# Altium integrated library GPDSE.IntLib: 426 symbols (part 3 of 5)
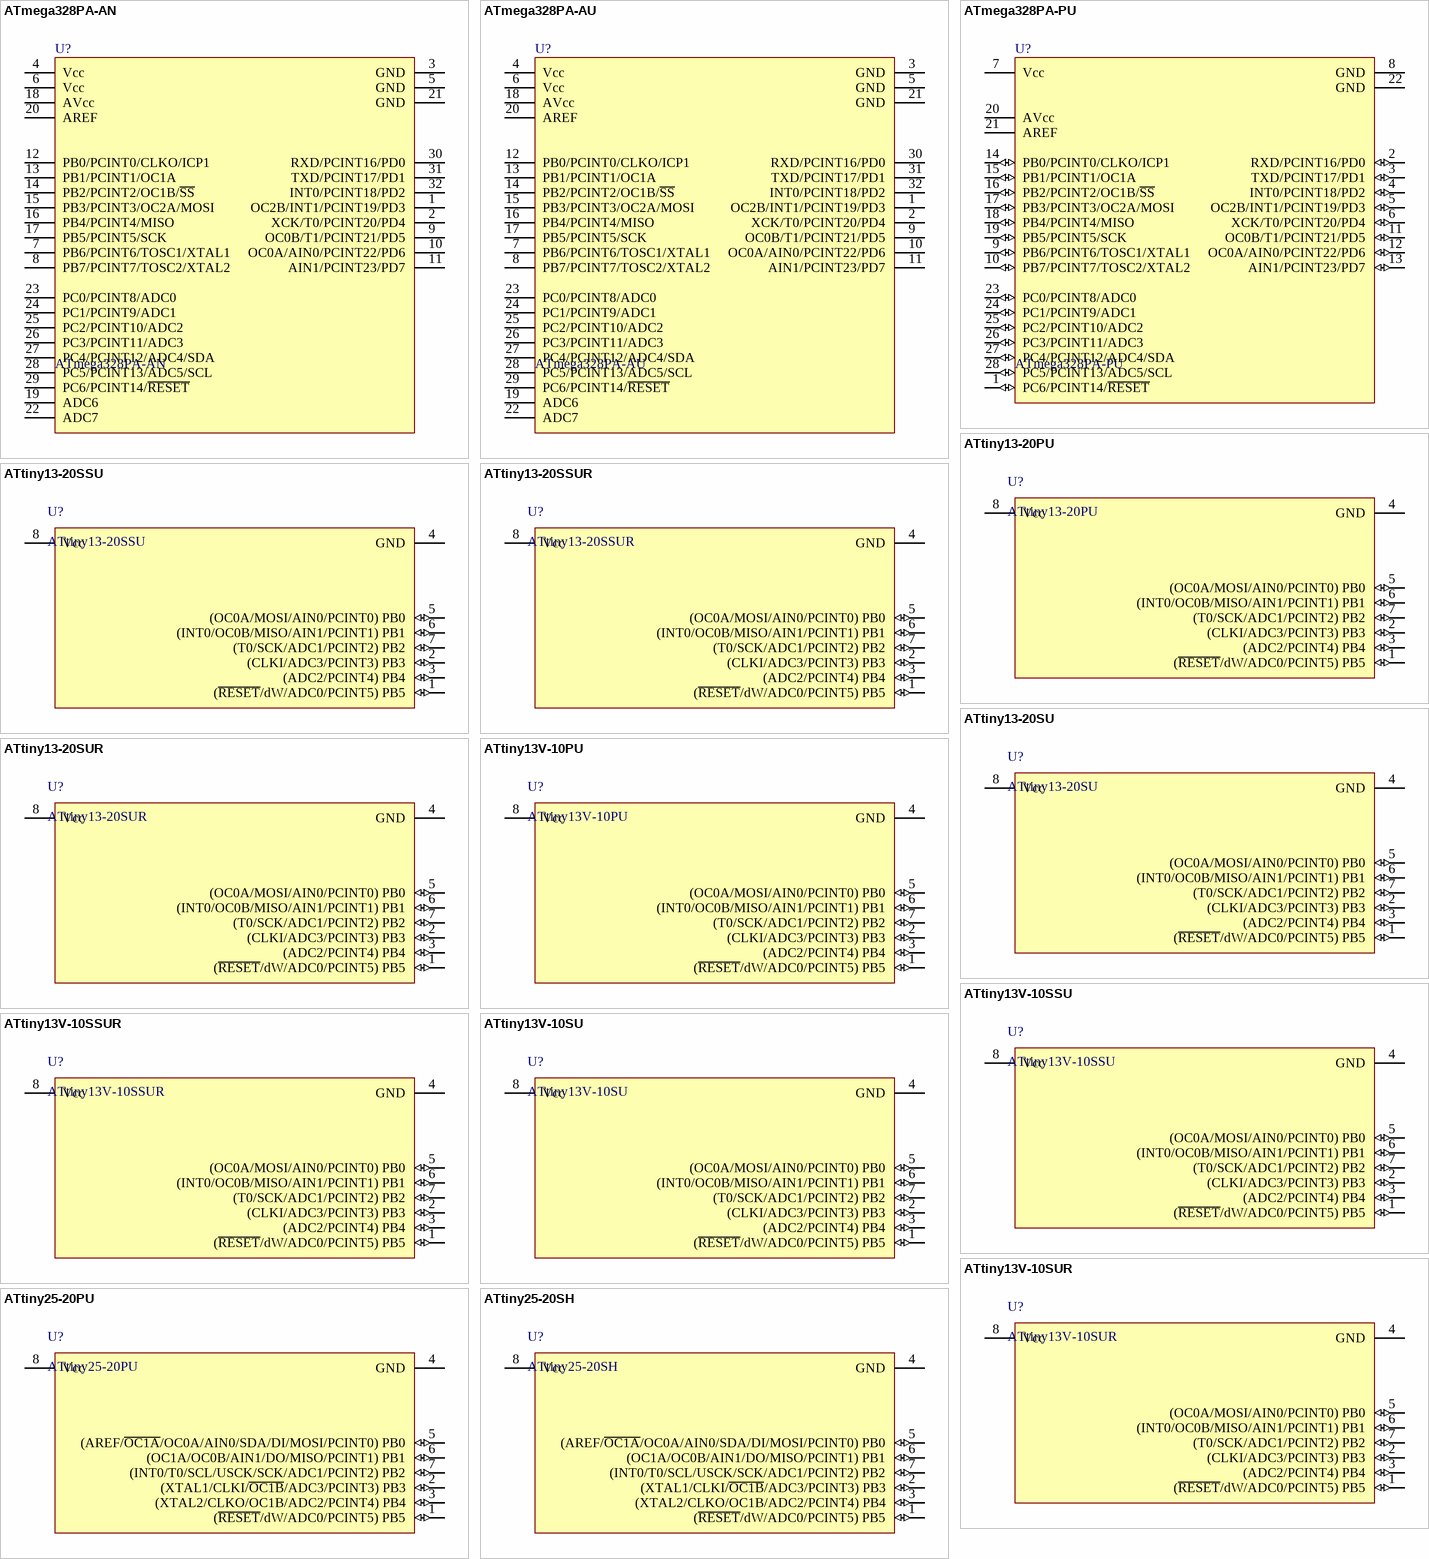
[diagram p28: symbols ATmega328PA-AN to ATtiny25-20SH]

## ATtiny13-20SSU
designator U?
Atmel 8-bit AVR Microcontroller with 1 KB In-System Programmable Flash; ADC Channel: 4; Analog Comparator: 1; Clock Frequency: 0 - 20 MHz; Debug: debugWire; EEPROM Memory: 64 B; Flash Memory: 1 KB; I/O Pins: 6; PWM Channel: 2; Serial USI: 0; Supply Voltage (Vdd): 2.7 - 5.5 V; SRAM Memory: 64 B; Timer 8 bits: 1
footprint SOIC08-150(50) (SOIC 8 Leads; Row Spacing 3.81 mm; Pitch 1.27 mm; 3D André L´Hérault)
pins: 1 (~{RESET}/dW/ADC0/PCINT5) PB5 (io), 2 (CLKI/ADC3/PCINT3) PB3 (io), 3 (ADC2/PCINT4) PB4 (io), 4 GND (power), 5 (OC0A/MOSI/AIN0/PCINT0) PB0 (io), 6 (INT0/OC0B/MISO/AIN1/PCINT1) PB1 (io), 7 (T0/SCK/ADC1/PCINT2) PB2 (io), 8 Vcc (power)

## ATtiny13-20SSUR
designator U?
Atmel 8-bit AVR Microcontroller with 1 KB In-System Programmable Flash; ADC Channel: 4; Analog Comparator: 1; Clock Frequency: 0 - 20 MHz; Debug: debugWire; EEPROM Memory: 64 B; Flash Memory: 1 KB; I/O Pins: 6; PWM Channel: 2; Serial USI: 0; Supply Voltage (Vdd): 2.7 - 5.5 V; SRAM Memory: 64 B; Timer 8 bits: 1
footprint SOIC08-150(50) (SOIC 8 Leads; Row Spacing 3.81 mm; Pitch 1.27 mm; 3D André L´Hérault)
pins: 1 (~{RESET}/dW/ADC0/PCINT5) PB5 (io), 2 (CLKI/ADC3/PCINT3) PB3 (io), 3 (ADC2/PCINT4) PB4 (io), 4 GND (power), 5 (OC0A/MOSI/AIN0/PCINT0) PB0 (io), 6 (INT0/OC0B/MISO/AIN1/PCINT1) PB1 (io), 7 (T0/SCK/ADC1/PCINT2) PB2 (io), 8 Vcc (power)

## ATtiny13-20SU
designator U?
Atmel 8-bit AVR Microcontroller with 1 KB In-System Programmable Flash; ADC Channel: 4; Analog Comparator: 1; Clock Frequency: 0 - 20 MHz; Debug: debugWire; EEPROM Memory: 64 B; Flash Memory: 1 KB; I/O Pins: 6; PWM Channel: 2; Serial USI: 0; Supply Voltage (Vdd): 2.7 - 5.5 V; SRAM Memory: 64 B; Timer 8 bits: 1
footprint SOP08-5.3mm(1.27mm) (Small Outline Package 8 pin)
pins: 1 (~{RESET}/dW/ADC0/PCINT5) PB5 (io), 2 (CLKI/ADC3/PCINT3) PB3 (io), 3 (ADC2/PCINT4) PB4 (io), 4 GND (power), 5 (OC0A/MOSI/AIN0/PCINT0) PB0 (io), 6 (INT0/OC0B/MISO/AIN1/PCINT1) PB1 (io), 7 (T0/SCK/ADC1/PCINT2) PB2 (io), 8 Vcc (power)

## ATtiny13-20SUR
designator U?
Atmel 8-bit AVR Microcontroller with 1 KB In-System Programmable Flash; ADC Channel: 4; Analog Comparator: 1; Clock Frequency: 0 - 20 MHz; Debug: debugWire; EEPROM Memory: 64 B; Flash Memory: 1 KB; I/O Pins: 6; PWM Channel: 2; Serial USI: 0; Supply Voltage (Vdd): 2.7 - 5.5 V; SRAM Memory: 64 B; Timer 8 bits: 1
footprint SOP08-5.3mm(1.27mm) (Small Outline Package 8 pin)
pins: 1 (~{RESET}/dW/ADC0/PCINT5) PB5 (io), 2 (CLKI/ADC3/PCINT3) PB3 (io), 3 (ADC2/PCINT4) PB4 (io), 4 GND (power), 5 (OC0A/MOSI/AIN0/PCINT0) PB0 (io), 6 (INT0/OC0B/MISO/AIN1/PCINT1) PB1 (io), 7 (T0/SCK/ADC1/PCINT2) PB2 (io), 8 Vcc (power)

## ATtiny13V-10PU
designator U?
Atmel 8-bit AVR Microcontroller with 1 KB In-System Programmable Flash; ADC Channel: 4; Analog Comparator: 1; Clock Frequency: 0 - 10 MHz; Debug: debugWire; EEPROM Memory: 64 B; Flash Memory: 1 KB; I/O Pins: 6; PWM Channel: 2; Serial USI: 0; Supply Voltage (Vdd): 1.8 - 5.5 V; SRAM Memory: 64 B; Timer 8 bits: 1
footprint DIP08-300(100) (DIP; 8 Leads; Row Spacing 7.62 mm; Pitch 2.54 mm; 3D CircuitWorks)
pins: 1 (~{RESET}/dW/ADC0/PCINT5) PB5 (io), 2 (CLKI/ADC3/PCINT3) PB3 (io), 3 (ADC2/PCINT4) PB4 (io), 4 GND (power), 5 (OC0A/MOSI/AIN0/PCINT0) PB0 (io), 6 (INT0/OC0B/MISO/AIN1/PCINT1) PB1 (io), 7 (T0/SCK/ADC1/PCINT2) PB2 (io), 8 Vcc (power)

## ATtiny13V-10SSU
designator U?
Atmel 8-bit AVR Microcontroller with 1 KB In-System Programmable Flash; ADC Channel: 4; Analog Comparator: 1; Clock Frequency: 0 - 10 MHz; Debug: debugWire; EEPROM Memory: 64 B; Flash Memory: 1 KB; I/O Pins: 6; PWM Channel: 2; Serial USI: 0; Supply Voltage (Vdd): 1.8 - 5.5 V; SRAM Memory: 64 B; Timer 8 bits: 1
footprint SOIC08-150(50) (SOIC 8 Leads; Row Spacing 3.81 mm; Pitch 1.27 mm; 3D André L´Hérault)
pins: 1 (~{RESET}/dW/ADC0/PCINT5) PB5 (io), 2 (CLKI/ADC3/PCINT3) PB3 (io), 3 (ADC2/PCINT4) PB4 (io), 4 GND (power), 5 (OC0A/MOSI/AIN0/PCINT0) PB0 (io), 6 (INT0/OC0B/MISO/AIN1/PCINT1) PB1 (io), 7 (T0/SCK/ADC1/PCINT2) PB2 (io), 8 Vcc (power)

## ATtiny13V-10SSUR
designator U?
Atmel 8-bit AVR Microcontroller with 1 KB In-System Programmable Flash; ADC Channel: 4; Analog Comparator: 1; Clock Frequency: 0 - 10 MHz; Debug: debugWire; EEPROM Memory: 64 B; Flash Memory: 1 KB; I/O Pins: 6; PWM Channel: 2; Serial USI: 0; Supply Voltage (Vdd): 1.8 - 5.5 V; SRAM Memory: 64 B; Timer 8 bits: 1
footprint SOIC08-150(50) (SOIC 8 Leads; Row Spacing 3.81 mm; Pitch 1.27 mm; 3D André L´Hérault)
pins: 1 (~{RESET}/dW/ADC0/PCINT5) PB5 (io), 2 (CLKI/ADC3/PCINT3) PB3 (io), 3 (ADC2/PCINT4) PB4 (io), 4 GND (power), 5 (OC0A/MOSI/AIN0/PCINT0) PB0 (io), 6 (INT0/OC0B/MISO/AIN1/PCINT1) PB1 (io), 7 (T0/SCK/ADC1/PCINT2) PB2 (io), 8 Vcc (power)

## ATtiny13V-10SU
designator U?
Atmel 8-bit AVR Microcontroller with 1 KB In-System Programmable Flash; ADC Channel: 4; Analog Comparator: 1; Clock Frequency: 0 - 10 MHz; Debug: debugWire; EEPROM Memory: 64 B; Flash Memory: 1 KB; I/O Pins: 6; PWM Channel: 2; Serial USI: 0; Supply Voltage (Vdd): 1.8 - 5.5 V; SRAM Memory: 64 B; Timer 8 bits: 1
footprint SOP08-5.3mm(1.27mm) (Small Outline Package 8 pin)
pins: 1 (~{RESET}/dW/ADC0/PCINT5) PB5 (io), 2 (CLKI/ADC3/PCINT3) PB3 (io), 3 (ADC2/PCINT4) PB4 (io), 4 GND (power), 5 (OC0A/MOSI/AIN0/PCINT0) PB0 (io), 6 (INT0/OC0B/MISO/AIN1/PCINT1) PB1 (io), 7 (T0/SCK/ADC1/PCINT2) PB2 (io), 8 Vcc (power)

## ATtiny13V-10SUR
designator U?
Atmel 8-bit AVR Microcontroller with 1 KB In-System Programmable Flash; ADC Channel: 4; Analog Comparator: 1; Clock Frequency: 0 - 10 MHz; Debug: debugWire; EEPROM Memory: 64 B; Flash Memory: 1 KB; I/O Pins: 6; PWM Channel: 2; Serial USI: 0; Supply Voltage (Vdd): 1.8 - 5.5 V; SRAM Memory: 64 B; Timer 8 bits: 1
footprint SOP08-5.3mm(1.27mm) (Small Outline Package 8 pin)
pins: 1 (~{RESET}/dW/ADC0/PCINT5) PB5 (io), 2 (CLKI/ADC3/PCINT3) PB3 (io), 3 (ADC2/PCINT4) PB4 (io), 4 GND (power), 5 (OC0A/MOSI/AIN0/PCINT0) PB0 (io), 6 (INT0/OC0B/MISO/AIN1/PCINT1) PB1 (io), 7 (T0/SCK/ADC1/PCINT2) PB2 (io), 8 Vcc (power)

## ATtiny25-20PU
designator U?
Atmel 8-bit AVR Microcontroller with 2 KB In-System Programmable Flash; ADC Channel: 4; Clock Frequency: 0 - 20 MHz; Debug: debugWire; EEPROM Memory: 128 B; Flash Memory: 2 KB; I/O Pins: 6; PWM Channel: 2; Serial USI: 1; Supply Voltage (Vdd): 2.7 - 5.5 V; Analog Comparator: *; SRAM Memory: 128 B; Timer 8 bits: 1
footprint DIP08-300(100) (DIP; 8 Leads; Row Spacing 7.62 mm; Pitch 2.54 mm; 3D CircuitWorks)
pins: 1 (~{RESET}/dW/ADC0/PCINT5) PB5 (io), 2 (XTAL1/CLKI/~{OC1B}/ADC3/PCINT3) PB3 (io), 3 (XTAL2/CLKO/OC1B/ADC2/PCINT4) PB4 (io), 4 GND (power), 5 (AREF/~{OC1A}/OC0A/AIN0/SDA/DI/MOSI/PCINT0) PB0 (io), 6 (OC1A/OC0B/AIN1/DO/MISO/PCINT1) PB1 (io), 7 (INT0/T0/SCL/USCK/SCK/ADC1/PCINT2) PB2 (io), 8 Vcc (power)

## ATtiny25-20SH
designator U?
Atmel 8-bit AVR Microcontroller with 2 KB In-System Programmable Flash; ADC Channel: 4; Clock Frequency: 0 - 20 MHz; Debug: debugWire; EEPROM Memory: 128 B; Flash Memory: 2 KB; I/O Pins: 6; PWM Channel: 2; Serial USI: 1; Supply Voltage (Vdd): 2.7 - 5.5 V; Analog Comparator: *; SRAM Memory: 128 B; Timer 8 bits: 1
footprint SOP08-5.3mm(1.27mm) (Small Outline Package 8 pin)
pins: 1 (~{RESET}/dW/ADC0/PCINT5) PB5 (io), 2 (XTAL1/CLKI/~{OC1B}/ADC3/PCINT3) PB3 (io), 3 (XTAL2/CLKO/OC1B/ADC2/PCINT4) PB4 (io), 4 GND (power), 5 (AREF/~{OC1A}/OC0A/AIN0/SDA/DI/MOSI/PCINT0) PB0 (io), 6 (OC1A/OC0B/AIN1/DO/MISO/PCINT1) PB1 (io), 7 (INT0/T0/SCL/USCK/SCK/ADC1/PCINT2) PB2 (io), 8 Vcc (power)

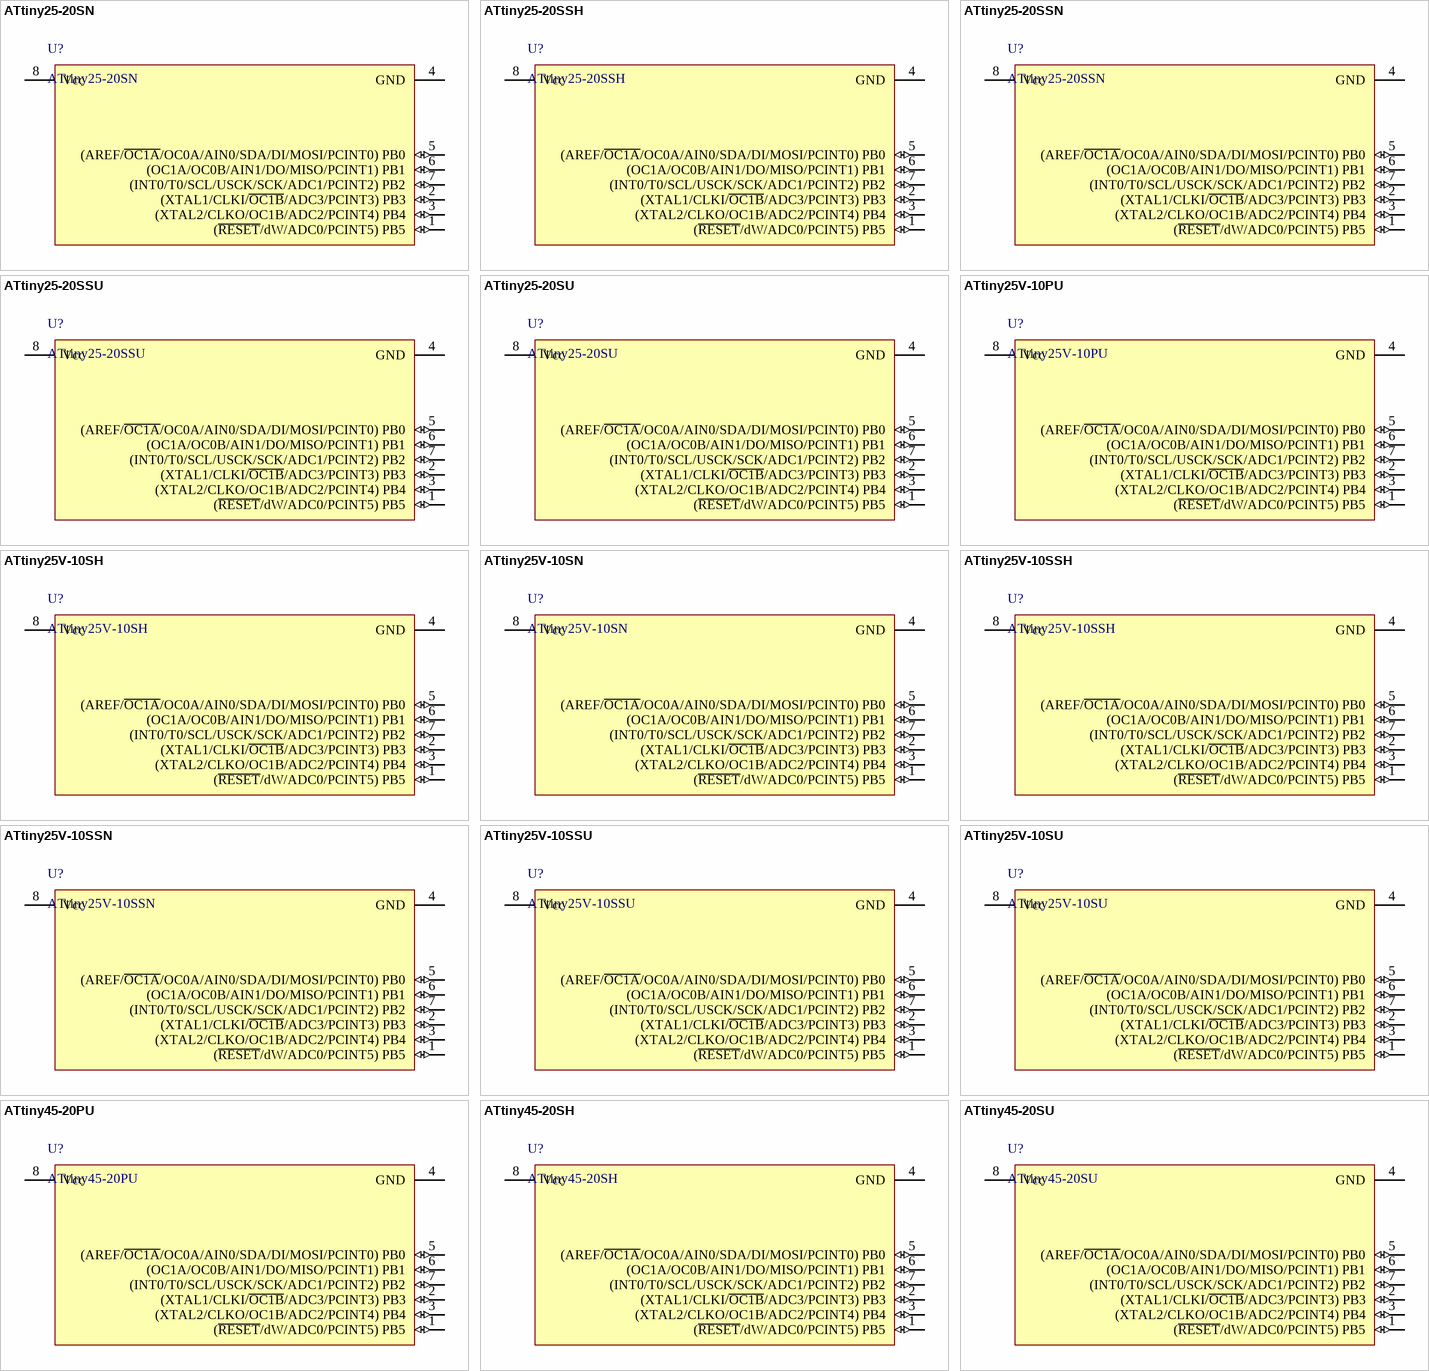
[diagram p11: symbols ATtiny25-20SN to ATtiny45-20SU]

## ATtiny25-20SN
designator U?
Atmel 8-bit AVR Microcontroller with 2 KB In-System Programmable Flash; ADC Channel: 4; Clock Frequency: 0 - 20 MHz; Debug: debugWire; EEPROM Memory: 128 B; Flash Memory: 2 KB; I/O Pins: 6; PWM Channel: 2; Serial USI: 1; Supply Voltage (Vdd): 2.7 - 5.5 V; Analog Comparator: *; SRAM Memory: 128 B; Timer 8 bits: 1
footprint SOP08-5.3mm(1.27mm) (Small Outline Package 8 pin)
pins: 1 (~{RESET}/dW/ADC0/PCINT5) PB5 (io), 2 (XTAL1/CLKI/~{OC1B}/ADC3/PCINT3) PB3 (io), 3 (XTAL2/CLKO/OC1B/ADC2/PCINT4) PB4 (io), 4 GND (power), 5 (AREF/~{OC1A}/OC0A/AIN0/SDA/DI/MOSI/PCINT0) PB0 (io), 6 (OC1A/OC0B/AIN1/DO/MISO/PCINT1) PB1 (io), 7 (INT0/T0/SCL/USCK/SCK/ADC1/PCINT2) PB2 (io), 8 Vcc (power)

## ATtiny25-20SSH
designator U?
Atmel 8-bit AVR Microcontroller with 2 KB In-System Programmable Flash; ADC Channel: 4; Clock Frequency: 0 - 20 MHz; Debug: debugWire; EEPROM Memory: 128 B; Flash Memory: 2 KB; I/O Pins: 6; PWM Channel: 2; Serial USI: 1; Supply Voltage (Vdd): 2.7 - 5.5 V; Analog Comparator: *; SRAM Memory: 128 B; Timer 8 bits: 1
footprint SOIC08-150(50) (SOIC 8 Leads; Row Spacing 3.81 mm; Pitch 1.27 mm; 3D André L´Hérault)
pins: 1 (~{RESET}/dW/ADC0/PCINT5) PB5 (io), 2 (XTAL1/CLKI/~{OC1B}/ADC3/PCINT3) PB3 (io), 3 (XTAL2/CLKO/OC1B/ADC2/PCINT4) PB4 (io), 4 GND (power), 5 (AREF/~{OC1A}/OC0A/AIN0/SDA/DI/MOSI/PCINT0) PB0 (io), 6 (OC1A/OC0B/AIN1/DO/MISO/PCINT1) PB1 (io), 7 (INT0/T0/SCL/USCK/SCK/ADC1/PCINT2) PB2 (io), 8 Vcc (power)

## ATtiny25-20SSN
designator U?
Atmel 8-bit AVR Microcontroller with 2 KB In-System Programmable Flash; ADC Channel: 4; Clock Frequency: 0 - 20 MHz; Debug: debugWire; EEPROM Memory: 128 B; Flash Memory: 2 KB; I/O Pins: 6; PWM Channel: 2; Serial USI: 1; Supply Voltage (Vdd): 2.7 - 5.5 V; Analog Comparator: *; SRAM Memory: 128 B; Timer 8 bits: 1
footprint SOIC08-150(50) (SOIC 8 Leads; Row Spacing 3.81 mm; Pitch 1.27 mm; 3D André L´Hérault)
pins: 1 (~{RESET}/dW/ADC0/PCINT5) PB5 (io), 2 (XTAL1/CLKI/~{OC1B}/ADC3/PCINT3) PB3 (io), 3 (XTAL2/CLKO/OC1B/ADC2/PCINT4) PB4 (io), 4 GND (power), 5 (AREF/~{OC1A}/OC0A/AIN0/SDA/DI/MOSI/PCINT0) PB0 (io), 6 (OC1A/OC0B/AIN1/DO/MISO/PCINT1) PB1 (io), 7 (INT0/T0/SCL/USCK/SCK/ADC1/PCINT2) PB2 (io), 8 Vcc (power)

## ATtiny25-20SSU
designator U?
Atmel 8-bit AVR Microcontroller with 2 KB In-System Programmable Flash; ADC Channel: 4; Clock Frequency: 0 - 20 MHz; Debug: debugWire; EEPROM Memory: 128 B; Flash Memory: 2 KB; I/O Pins: 6; PWM Channel: 2; Serial USI: 1; Supply Voltage (Vdd): 2.7 - 5.5 V; Analog Comparator: *; SRAM Memory: 128 B; Timer 8 bits: 1
footprint SOIC08-150(50) (SOIC 8 Leads; Row Spacing 3.81 mm; Pitch 1.27 mm; 3D André L´Hérault)
pins: 1 (~{RESET}/dW/ADC0/PCINT5) PB5 (io), 2 (XTAL1/CLKI/~{OC1B}/ADC3/PCINT3) PB3 (io), 3 (XTAL2/CLKO/OC1B/ADC2/PCINT4) PB4 (io), 4 GND (power), 5 (AREF/~{OC1A}/OC0A/AIN0/SDA/DI/MOSI/PCINT0) PB0 (io), 6 (OC1A/OC0B/AIN1/DO/MISO/PCINT1) PB1 (io), 7 (INT0/T0/SCL/USCK/SCK/ADC1/PCINT2) PB2 (io), 8 Vcc (power)

## ATtiny25-20SU
designator U?
Atmel 8-bit AVR Microcontroller with 2 KB In-System Programmable Flash; ADC Channel: 4; Clock Frequency: 0 - 20 MHz; Debug: debugWire; EEPROM Memory: 128 B; Flash Memory: 2 KB; I/O Pins: 6; PWM Channel: 2; Serial USI: 1; Supply Voltage (Vdd): 2.7 - 5.5 V; Analog Comparator: *; SRAM Memory: 128 B; Timer 8 bits: 1
footprint SOP08-5.3mm(1.27mm) (Small Outline Package 8 pin)
pins: 1 (~{RESET}/dW/ADC0/PCINT5) PB5 (io), 2 (XTAL1/CLKI/~{OC1B}/ADC3/PCINT3) PB3 (io), 3 (XTAL2/CLKO/OC1B/ADC2/PCINT4) PB4 (io), 4 GND (power), 5 (AREF/~{OC1A}/OC0A/AIN0/SDA/DI/MOSI/PCINT0) PB0 (io), 6 (OC1A/OC0B/AIN1/DO/MISO/PCINT1) PB1 (io), 7 (INT0/T0/SCL/USCK/SCK/ADC1/PCINT2) PB2 (io), 8 Vcc (power)

## ATtiny25V-10PU
designator U?
Atmel 8-bit AVR Microcontroller with 2 KB In-System Programmable Flash; ADC Channel: 4; Clock Frequency: 0 - 10 MHz; Debug: debugWire; EEPROM Memory: 128 B; Flash Memory: 2 KB; I/O Pins: 6; PWM Channel: 2; Serial USI: 1; Supply Voltage (Vdd): 1.8 - 5.5 V; Analog Comparator: *; SRAM Memory: 128 B; Timer 8 bits: 1
footprint DIP08-300(100) (DIP; 8 Leads; Row Spacing 7.62 mm; Pitch 2.54 mm; 3D CircuitWorks)
pins: 1 (~{RESET}/dW/ADC0/PCINT5) PB5 (io), 2 (XTAL1/CLKI/~{OC1B}/ADC3/PCINT3) PB3 (io), 3 (XTAL2/CLKO/OC1B/ADC2/PCINT4) PB4 (io), 4 GND (power), 5 (AREF/~{OC1A}/OC0A/AIN0/SDA/DI/MOSI/PCINT0) PB0 (io), 6 (OC1A/OC0B/AIN1/DO/MISO/PCINT1) PB1 (io), 7 (INT0/T0/SCL/USCK/SCK/ADC1/PCINT2) PB2 (io), 8 Vcc (power)

## ATtiny25V-10SH
designator U?
Atmel 8-bit AVR Microcontroller with 2 KB In-System Programmable Flash; ADC Channel: 4; Clock Frequency: 0 - 10 MHz; Debug: debugWire; EEPROM Memory: 128 B; Flash Memory: 2 KB; I/O Pins: 6; PWM Channel: 2; Serial USI: 1; Supply Voltage (Vdd): 1.8 - 5.5 V; Analog Comparator: *; SRAM Memory: 128 B; Timer 8 bits: 1
footprint SOP08-5.3mm(1.27mm) (Small Outline Package 8 pin)
pins: 1 (~{RESET}/dW/ADC0/PCINT5) PB5 (io), 2 (XTAL1/CLKI/~{OC1B}/ADC3/PCINT3) PB3 (io), 3 (XTAL2/CLKO/OC1B/ADC2/PCINT4) PB4 (io), 4 GND (power), 5 (AREF/~{OC1A}/OC0A/AIN0/SDA/DI/MOSI/PCINT0) PB0 (io), 6 (OC1A/OC0B/AIN1/DO/MISO/PCINT1) PB1 (io), 7 (INT0/T0/SCL/USCK/SCK/ADC1/PCINT2) PB2 (io), 8 Vcc (power)

## ATtiny25V-10SN
designator U?
Atmel 8-bit AVR Microcontroller with 2 KB In-System Programmable Flash; ADC Channel: 4; Clock Frequency: 0 - 10 MHz; Debug: debugWire; EEPROM Memory: 128 B; Flash Memory: 2 KB; I/O Pins: 6; PWM Channel: 2; Serial USI: 1; Supply Voltage (Vdd): 1.8 - 5.5 V; Analog Comparator: *; SRAM Memory: 128 B; Timer 8 bits: 1
footprint SOP08-5.3mm(1.27mm) (Small Outline Package 8 pin)
pins: 1 (~{RESET}/dW/ADC0/PCINT5) PB5 (io), 2 (XTAL1/CLKI/~{OC1B}/ADC3/PCINT3) PB3 (io), 3 (XTAL2/CLKO/OC1B/ADC2/PCINT4) PB4 (io), 4 GND (power), 5 (AREF/~{OC1A}/OC0A/AIN0/SDA/DI/MOSI/PCINT0) PB0 (io), 6 (OC1A/OC0B/AIN1/DO/MISO/PCINT1) PB1 (io), 7 (INT0/T0/SCL/USCK/SCK/ADC1/PCINT2) PB2 (io), 8 Vcc (power)

## ATtiny25V-10SSH
designator U?
Atmel 8-bit AVR Microcontroller with 2 KB In-System Programmable Flash; ADC Channel: 4; Clock Frequency: 0 - 10 MHz; Debug: debugWire; EEPROM Memory: 128 B; Flash Memory: 2 KB; I/O Pins: 6; PWM Channel: 2; Serial USI: 1; Supply Voltage (Vdd): 1.8 - 5.5 V; Analog Comparator: *; SRAM Memory: 128 B; Timer 8 bits: 1
footprint SOIC08-150(50) (SOIC 8 Leads; Row Spacing 3.81 mm; Pitch 1.27 mm; 3D André L´Hérault)
pins: 1 (~{RESET}/dW/ADC0/PCINT5) PB5 (io), 2 (XTAL1/CLKI/~{OC1B}/ADC3/PCINT3) PB3 (io), 3 (XTAL2/CLKO/OC1B/ADC2/PCINT4) PB4 (io), 4 GND (power), 5 (AREF/~{OC1A}/OC0A/AIN0/SDA/DI/MOSI/PCINT0) PB0 (io), 6 (OC1A/OC0B/AIN1/DO/MISO/PCINT1) PB1 (io), 7 (INT0/T0/SCL/USCK/SCK/ADC1/PCINT2) PB2 (io), 8 Vcc (power)

## ATtiny25V-10SSN
designator U?
Atmel 8-bit AVR Microcontroller with 2 KB In-System Programmable Flash; ADC Channel: 4; Clock Frequency: 0 - 10 MHz; Debug: debugWire; EEPROM Memory: 128 B; Flash Memory: 2 KB; I/O Pins: 6; PWM Channel: 2; Serial USI: 1; Supply Voltage (Vdd): 1.8 - 5.5 V; Analog Comparator: *; SRAM Memory: 128 B; Timer 8 bits: 1
footprint SOIC08-150(50) (SOIC 8 Leads; Row Spacing 3.81 mm; Pitch 1.27 mm; 3D André L´Hérault)
pins: 1 (~{RESET}/dW/ADC0/PCINT5) PB5 (io), 2 (XTAL1/CLKI/~{OC1B}/ADC3/PCINT3) PB3 (io), 3 (XTAL2/CLKO/OC1B/ADC2/PCINT4) PB4 (io), 4 GND (power), 5 (AREF/~{OC1A}/OC0A/AIN0/SDA/DI/MOSI/PCINT0) PB0 (io), 6 (OC1A/OC0B/AIN1/DO/MISO/PCINT1) PB1 (io), 7 (INT0/T0/SCL/USCK/SCK/ADC1/PCINT2) PB2 (io), 8 Vcc (power)

## ATtiny25V-10SSU
designator U?
Atmel 8-bit AVR Microcontroller with 2 KB In-System Programmable Flash; ADC Channel: 4; Clock Frequency: 0 - 10 MHz; Debug: debugWire; EEPROM Memory: 128 B; Flash Memory: 2 KB; I/O Pins: 6; PWM Channel: 2; Serial USI: 1; Supply Voltage (Vdd): 1.8 - 5.5 V; Analog Comparator: *; SRAM Memory: 128 B; Timer 8 bits: 1
footprint SOIC08-150(50) (SOIC 8 Leads; Row Spacing 3.81 mm; Pitch 1.27 mm; 3D André L´Hérault)
pins: 1 (~{RESET}/dW/ADC0/PCINT5) PB5 (io), 2 (XTAL1/CLKI/~{OC1B}/ADC3/PCINT3) PB3 (io), 3 (XTAL2/CLKO/OC1B/ADC2/PCINT4) PB4 (io), 4 GND (power), 5 (AREF/~{OC1A}/OC0A/AIN0/SDA/DI/MOSI/PCINT0) PB0 (io), 6 (OC1A/OC0B/AIN1/DO/MISO/PCINT1) PB1 (io), 7 (INT0/T0/SCL/USCK/SCK/ADC1/PCINT2) PB2 (io), 8 Vcc (power)

## ATtiny25V-10SU
designator U?
Atmel 8-bit AVR Microcontroller with 2 KB In-System Programmable Flash; ADC Channel: 4; Clock Frequency: 0 - 10 MHz; Debug: debugWire; EEPROM Memory: 128 B; Flash Memory: 2 KB; I/O Pins: 6; PWM Channel: 2; Serial USI: 1; Supply Voltage (Vdd): 1.8 - 5.5 V; Analog Comparator: *; SRAM Memory: 128 B; Timer 8 bits: 1
footprint SOP08-5.3mm(1.27mm) (Small Outline Package 8 pin)
pins: 1 (~{RESET}/dW/ADC0/PCINT5) PB5 (io), 2 (XTAL1/CLKI/~{OC1B}/ADC3/PCINT3) PB3 (io), 3 (XTAL2/CLKO/OC1B/ADC2/PCINT4) PB4 (io), 4 GND (power), 5 (AREF/~{OC1A}/OC0A/AIN0/SDA/DI/MOSI/PCINT0) PB0 (io), 6 (OC1A/OC0B/AIN1/DO/MISO/PCINT1) PB1 (io), 7 (INT0/T0/SCL/USCK/SCK/ADC1/PCINT2) PB2 (io), 8 Vcc (power)

## ATtiny45-20PU
designator U?
Atmel 8-bit AVR Microcontroller with 4 KB In-System Programmable Flash; ADC Channel: 4; Clock Frequency: 0 - 20 MHz; Debug: debugWire; EEPROM Memory: 256 B; Flash Memory: 4 KB; I/O Pins: 6; PWM Channel: 2; Serial USI: 1; Supply Voltage (Vdd): 2.7 - 5.5 V; Analog Comparator: *; SRAM Memory: 256 B; Timer 8 bits: 1
footprint DIP08-300(100) (DIP; 8 Leads; Row Spacing 7.62 mm; Pitch 2.54 mm; 3D CircuitWorks)
pins: 1 (~{RESET}/dW/ADC0/PCINT5) PB5 (io), 2 (XTAL1/CLKI/~{OC1B}/ADC3/PCINT3) PB3 (io), 3 (XTAL2/CLKO/OC1B/ADC2/PCINT4) PB4 (io), 4 GND (power), 5 (AREF/~{OC1A}/OC0A/AIN0/SDA/DI/MOSI/PCINT0) PB0 (io), 6 (OC1A/OC0B/AIN1/DO/MISO/PCINT1) PB1 (io), 7 (INT0/T0/SCL/USCK/SCK/ADC1/PCINT2) PB2 (io), 8 Vcc (power)

## ATtiny45-20SH
designator U?
Atmel 8-bit AVR Microcontroller with 4 KB In-System Programmable Flash; ADC Channel: 4; Clock Frequency: 0 - 20 MHz; Debug: debugWire; EEPROM Memory: 256 B; Flash Memory: 4 KB; I/O Pins: 6; PWM Channel: 2; Serial USI: 1; Supply Voltage (Vdd): 2.7 - 5.5 V; Analog Comparator: *; SRAM Memory: 256 B; Timer 8 bits: 1
footprint SOP08-5.3mm(1.27mm) (Small Outline Package 8 pin)
pins: 1 (~{RESET}/dW/ADC0/PCINT5) PB5 (io), 2 (XTAL1/CLKI/~{OC1B}/ADC3/PCINT3) PB3 (io), 3 (XTAL2/CLKO/OC1B/ADC2/PCINT4) PB4 (io), 4 GND (power), 5 (AREF/~{OC1A}/OC0A/AIN0/SDA/DI/MOSI/PCINT0) PB0 (io), 6 (OC1A/OC0B/AIN1/DO/MISO/PCINT1) PB1 (io), 7 (INT0/T0/SCL/USCK/SCK/ADC1/PCINT2) PB2 (io), 8 Vcc (power)

## ATtiny45-20SU
designator U?
Atmel 8-bit AVR Microcontroller with 4 KB In-System Programmable Flash; ADC Channel: 4; Clock Frequency: 0 - 20 MHz; Debug: debugWire; EEPROM Memory: 256 B; Flash Memory: 4 KB; I/O Pins: 6; PWM Channel: 2; Serial USI: 1; Supply Voltage (Vdd): 2.7 - 5.5 V; Analog Comparator: *; SRAM Memory: 256 B; Timer 8 bits: 1
footprint SOP08-5.3mm(1.27mm) (Small Outline Package 8 pin)
pins: 1 (~{RESET}/dW/ADC0/PCINT5) PB5 (io), 2 (XTAL1/CLKI/~{OC1B}/ADC3/PCINT3) PB3 (io), 3 (XTAL2/CLKO/OC1B/ADC2/PCINT4) PB4 (io), 4 GND (power), 5 (AREF/~{OC1A}/OC0A/AIN0/SDA/DI/MOSI/PCINT0) PB0 (io), 6 (OC1A/OC0B/AIN1/DO/MISO/PCINT1) PB1 (io), 7 (INT0/T0/SCL/USCK/SCK/ADC1/PCINT2) PB2 (io), 8 Vcc (power)

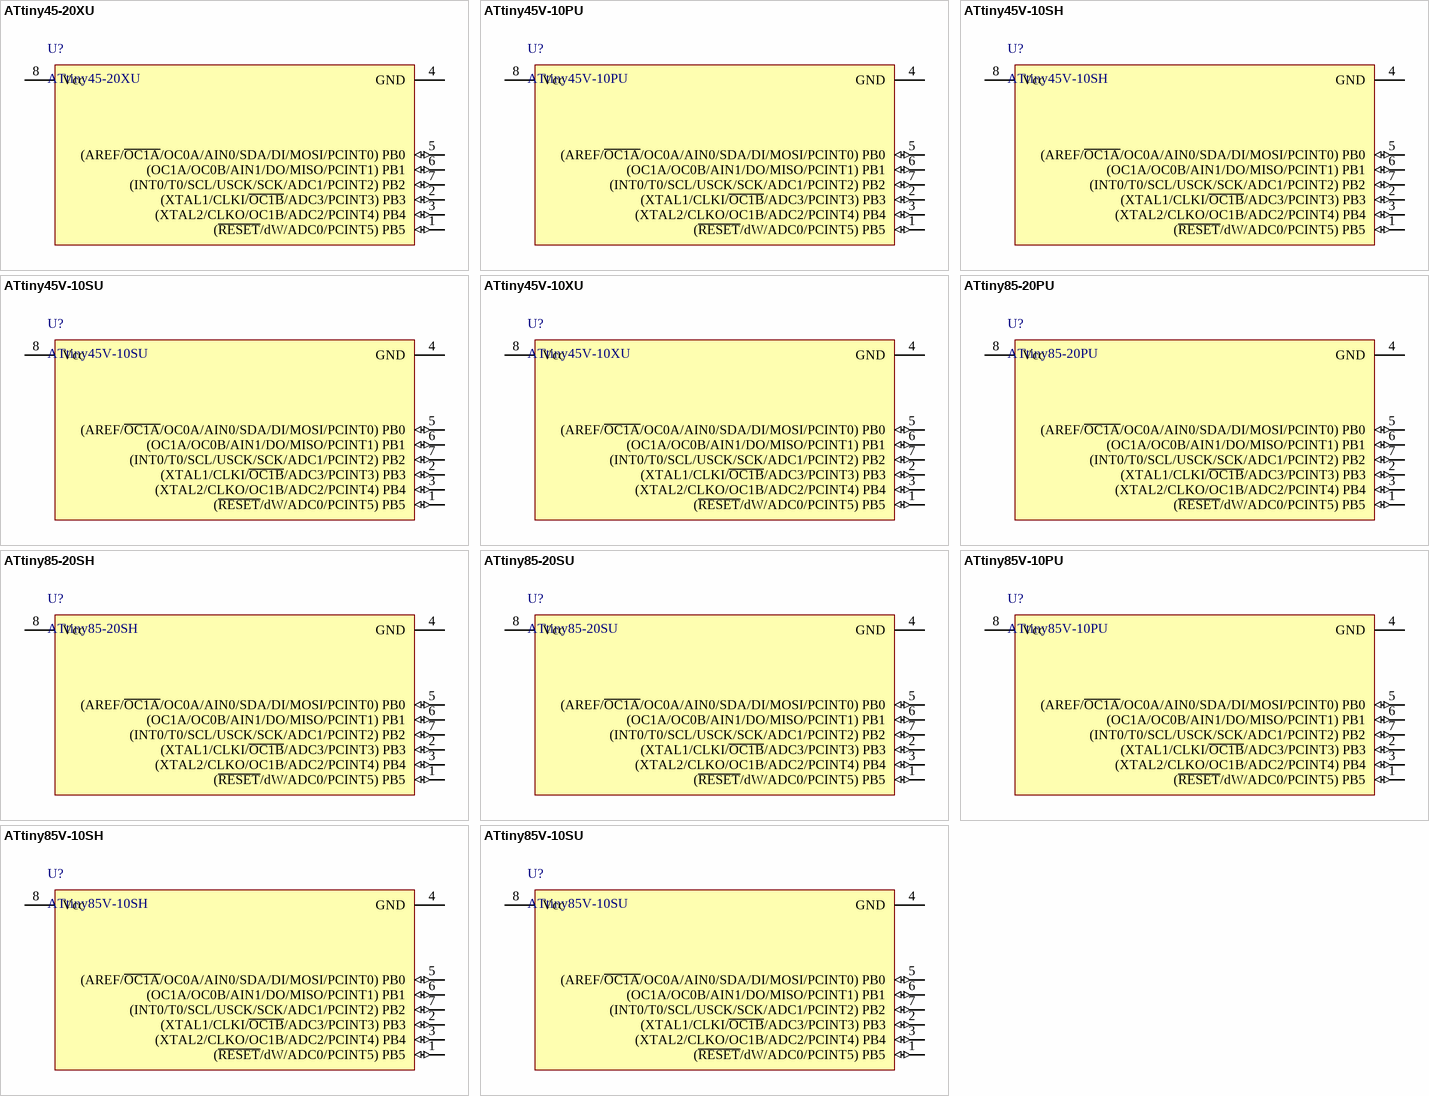
[diagram p12: symbols ATtiny45-20XU to ATtiny85V-10SU]

## ATtiny45-20XU
designator U?
Atmel 8-bit AVR Microcontroller with 4 KB In-System Programmable Flash; ADC Channel: 4; Clock Frequency: 0 - 20 MHz; Debug: debugWire; EEPROM Memory: 256 B; Flash Memory: 4 KB; I/O Pins: 6; PWM Channel: 2; Serial USI: 1; Supply Voltage (Vdd): 2.7 - 5.5 V; Analog Comparator: *; SRAM Memory: 256 B; Timer 8 bits: 1
footprint SOP08-4.4mm(0.65mm) (Thin Shrink Small Outline Package 8 pin)
pins: 1 (~{RESET}/dW/ADC0/PCINT5) PB5 (io), 2 (XTAL1/CLKI/~{OC1B}/ADC3/PCINT3) PB3 (io), 3 (XTAL2/CLKO/OC1B/ADC2/PCINT4) PB4 (io), 4 GND (power), 5 (AREF/~{OC1A}/OC0A/AIN0/SDA/DI/MOSI/PCINT0) PB0 (io), 6 (OC1A/OC0B/AIN1/DO/MISO/PCINT1) PB1 (io), 7 (INT0/T0/SCL/USCK/SCK/ADC1/PCINT2) PB2 (io), 8 Vcc (power)

## ATtiny45V-10PU
designator U?
Atmel 8-bit AVR Microcontroller with 4 KB In-System Programmable Flash; ADC Channel: 4; Clock Frequency: 0 - 10 MHz; Debug: debugWire; EEPROM Memory: 256 B; Flash Memory: 4 KB; I/O Pins: 6; PWM Channel: 2; Serial USI: 1; Supply Voltage (Vdd): 1.8 - 5.5 V; Analog Comparator: *; SRAM Memory: 256 B; Timer 8 bits: 1
footprint DIP08-300(100) (DIP; 8 Leads; Row Spacing 7.62 mm; Pitch 2.54 mm; 3D CircuitWorks)
pins: 1 (~{RESET}/dW/ADC0/PCINT5) PB5 (io), 2 (XTAL1/CLKI/~{OC1B}/ADC3/PCINT3) PB3 (io), 3 (XTAL2/CLKO/OC1B/ADC2/PCINT4) PB4 (io), 4 GND (power), 5 (AREF/~{OC1A}/OC0A/AIN0/SDA/DI/MOSI/PCINT0) PB0 (io), 6 (OC1A/OC0B/AIN1/DO/MISO/PCINT1) PB1 (io), 7 (INT0/T0/SCL/USCK/SCK/ADC1/PCINT2) PB2 (io), 8 Vcc (power)

## ATtiny45V-10SH
designator U?
Atmel 8-bit AVR Microcontroller with 4 KB In-System Programmable Flash; ADC Channel: 4; Clock Frequency: 0 - 10 MHz; Debug: debugWire; EEPROM Memory: 256 B; Flash Memory: 4 KB; I/O Pins: 6; PWM Channel: 2; Serial USI: 1; Supply Voltage (Vdd): 1.8 - 5.5 V; Analog Comparator: *; SRAM Memory: 256 B; Timer 8 bits: 1
footprint SOP08-5.3mm(1.27mm) (Small Outline Package 8 pin)
pins: 1 (~{RESET}/dW/ADC0/PCINT5) PB5 (io), 2 (XTAL1/CLKI/~{OC1B}/ADC3/PCINT3) PB3 (io), 3 (XTAL2/CLKO/OC1B/ADC2/PCINT4) PB4 (io), 4 GND (power), 5 (AREF/~{OC1A}/OC0A/AIN0/SDA/DI/MOSI/PCINT0) PB0 (io), 6 (OC1A/OC0B/AIN1/DO/MISO/PCINT1) PB1 (io), 7 (INT0/T0/SCL/USCK/SCK/ADC1/PCINT2) PB2 (io), 8 Vcc (power)

## ATtiny45V-10SU
designator U?
Atmel 8-bit AVR Microcontroller with 4 KB In-System Programmable Flash; ADC Channel: 4; Clock Frequency: 0 - 10 MHz; Debug: debugWire; EEPROM Memory: 256 B; Flash Memory: 4 KB; I/O Pins: 6; PWM Channel: 2; Serial USI: 1; Supply Voltage (Vdd): 1.8 - 5.5 V; Analog Comparator: *; SRAM Memory: 256 B; Timer 8 bits: 1
footprint SOP08-5.3mm(1.27mm) (Small Outline Package 8 pin)
pins: 1 (~{RESET}/dW/ADC0/PCINT5) PB5 (io), 2 (XTAL1/CLKI/~{OC1B}/ADC3/PCINT3) PB3 (io), 3 (XTAL2/CLKO/OC1B/ADC2/PCINT4) PB4 (io), 4 GND (power), 5 (AREF/~{OC1A}/OC0A/AIN0/SDA/DI/MOSI/PCINT0) PB0 (io), 6 (OC1A/OC0B/AIN1/DO/MISO/PCINT1) PB1 (io), 7 (INT0/T0/SCL/USCK/SCK/ADC1/PCINT2) PB2 (io), 8 Vcc (power)

## ATtiny45V-10XU
designator U?
Atmel 8-bit AVR Microcontroller with 4 KB In-System Programmable Flash; ADC Channel: 4; Clock Frequency: 0 - 10 MHz; Debug: debugWire; EEPROM Memory: 256 B; Flash Memory: 4 KB; I/O Pins: 6; PWM Channel: 2; Serial USI: 1; Supply Voltage (Vdd): 1.8 - 5.5 V; Analog Comparator: *; SRAM Memory: 256 B; Timer 8 bits: 1
footprint SOP08-4.4mm(0.65mm) (Thin Shrink Small Outline Package 8 pin)
pins: 1 (~{RESET}/dW/ADC0/PCINT5) PB5 (io), 2 (XTAL1/CLKI/~{OC1B}/ADC3/PCINT3) PB3 (io), 3 (XTAL2/CLKO/OC1B/ADC2/PCINT4) PB4 (io), 4 GND (power), 5 (AREF/~{OC1A}/OC0A/AIN0/SDA/DI/MOSI/PCINT0) PB0 (io), 6 (OC1A/OC0B/AIN1/DO/MISO/PCINT1) PB1 (io), 7 (INT0/T0/SCL/USCK/SCK/ADC1/PCINT2) PB2 (io), 8 Vcc (power)

## ATtiny85-20PU
designator U?
Atmel 8-bit AVR Microcontroller with 8 KB In-System Programmable Flash; ADC Channel: 4; Clock Frequency: 0 - 20 MHz; Debug: debugWire; EEPROM Memory: 512 B; Flash Memory: 8 KB; I/O Pins: 6; PWM Channel: 2; Serial USI: 1; Supply Voltage (Vdd): 2.7 - 5.5 V; Analog Comparator: *; SRAM Memory: 512 B; Timer 8 bits: 1
footprint DIP08-300(100) (DIP; 8 Leads; Row Spacing 7.62 mm; Pitch 2.54 mm; 3D CircuitWorks)
pins: 1 (~{RESET}/dW/ADC0/PCINT5) PB5 (io), 2 (XTAL1/CLKI/~{OC1B}/ADC3/PCINT3) PB3 (io), 3 (XTAL2/CLKO/OC1B/ADC2/PCINT4) PB4 (io), 4 GND (power), 5 (AREF/~{OC1A}/OC0A/AIN0/SDA/DI/MOSI/PCINT0) PB0 (io), 6 (OC1A/OC0B/AIN1/DO/MISO/PCINT1) PB1 (io), 7 (INT0/T0/SCL/USCK/SCK/ADC1/PCINT2) PB2 (io), 8 Vcc (power)

## ATtiny85-20SH
designator U?
Atmel 8-bit AVR Microcontroller with 8 KB In-System Programmable Flash; ADC Channel: 4; Clock Frequency: 0 - 20 MHz; Debug: debugWire; EEPROM Memory: 512 B; Flash Memory: 8 KB; I/O Pins: 6; PWM Channel: 2; Serial USI: 1; Supply Voltage (Vdd): 2.7 - 5.5 V; Analog Comparator: *; SRAM Memory: 512 B; Timer 8 bits: 1
footprint SOP08-5.3mm(1.27mm) (Small Outline Package 8 pin)
pins: 1 (~{RESET}/dW/ADC0/PCINT5) PB5 (io), 2 (XTAL1/CLKI/~{OC1B}/ADC3/PCINT3) PB3 (io), 3 (XTAL2/CLKO/OC1B/ADC2/PCINT4) PB4 (io), 4 GND (power), 5 (AREF/~{OC1A}/OC0A/AIN0/SDA/DI/MOSI/PCINT0) PB0 (io), 6 (OC1A/OC0B/AIN1/DO/MISO/PCINT1) PB1 (io), 7 (INT0/T0/SCL/USCK/SCK/ADC1/PCINT2) PB2 (io), 8 Vcc (power)

## ATtiny85-20SU
designator U?
Atmel 8-bit AVR Microcontroller with 8 KB In-System Programmable Flash; ADC Channel: 4; Clock Frequency: 0 - 20 MHz; Debug: debugWire; EEPROM Memory: 512 B; Flash Memory: 8 KB; I/O Pins: 6; PWM Channel: 2; Serial USI: 1; Supply Voltage (Vdd): 2.7 - 5.5 V; Analog Comparator: *; SRAM Memory: 512 B; Timer 8 bits: 1
footprint SOP08-5.3mm(1.27mm) (Small Outline Package 8 pin)
pins: 1 (~{RESET}/dW/ADC0/PCINT5) PB5 (io), 2 (XTAL1/CLKI/~{OC1B}/ADC3/PCINT3) PB3 (io), 3 (XTAL2/CLKO/OC1B/ADC2/PCINT4) PB4 (io), 4 GND (power), 5 (AREF/~{OC1A}/OC0A/AIN0/SDA/DI/MOSI/PCINT0) PB0 (io), 6 (OC1A/OC0B/AIN1/DO/MISO/PCINT1) PB1 (io), 7 (INT0/T0/SCL/USCK/SCK/ADC1/PCINT2) PB2 (io), 8 Vcc (power)

## ATtiny85V-10PU
designator U?
Atmel 8-bit AVR Microcontroller with 8 KB In-System Programmable Flash; ADC Channel: 4; Clock Frequency: 0 - 10 MHz; Debug: debugWire; EEPROM Memory: 512 B; Flash Memory: 8 KB; I/O Pins: 6; PWM Channel: 2; Serial USI: 1; Supply Voltage (Vdd): 1.8 - 5.5 V; Analog Comparator: *; SRAM Memory: 512 B; Timer 8 bits: 1
footprint DIP08-300(100) (DIP; 8 Leads; Row Spacing 7.62 mm; Pitch 2.54 mm; 3D CircuitWorks)
pins: 1 (~{RESET}/dW/ADC0/PCINT5) PB5 (io), 2 (XTAL1/CLKI/~{OC1B}/ADC3/PCINT3) PB3 (io), 3 (XTAL2/CLKO/OC1B/ADC2/PCINT4) PB4 (io), 4 GND (power), 5 (AREF/~{OC1A}/OC0A/AIN0/SDA/DI/MOSI/PCINT0) PB0 (io), 6 (OC1A/OC0B/AIN1/DO/MISO/PCINT1) PB1 (io), 7 (INT0/T0/SCL/USCK/SCK/ADC1/PCINT2) PB2 (io), 8 Vcc (power)

## ATtiny85V-10SH
designator U?
Atmel 8-bit AVR Microcontroller with 8 KB In-System Programmable Flash; ADC Channel: 4; Clock Frequency: 0 - 10 MHz; Debug: debugWire; EEPROM Memory: 512 B; Flash Memory: 8 KB; I/O Pins: 6; PWM Channel: 2; Serial USI: 1; Supply Voltage (Vdd): 1.8 - 5.5 V; Analog Comparator: *; SRAM Memory: 512 B; Timer 8 bits: 1
footprint SOP08-5.3mm(1.27mm) (Small Outline Package 8 pin)
pins: 1 (~{RESET}/dW/ADC0/PCINT5) PB5 (io), 2 (XTAL1/CLKI/~{OC1B}/ADC3/PCINT3) PB3 (io), 3 (XTAL2/CLKO/OC1B/ADC2/PCINT4) PB4 (io), 4 GND (power), 5 (AREF/~{OC1A}/OC0A/AIN0/SDA/DI/MOSI/PCINT0) PB0 (io), 6 (OC1A/OC0B/AIN1/DO/MISO/PCINT1) PB1 (io), 7 (INT0/T0/SCL/USCK/SCK/ADC1/PCINT2) PB2 (io), 8 Vcc (power)

## ATtiny85V-10SU
designator U?
Atmel 8-bit AVR Microcontroller with 8 KB In-System Programmable Flash; ADC Channel: 4; Clock Frequency: 0 - 10 MHz; Debug: debugWire; EEPROM Memory: 512 B; Flash Memory: 8 KB; I/O Pins: 6; PWM Channel: 2; Serial USI: 1; Supply Voltage (Vdd): 1.8 - 5.5 V; Analog Comparator: *; SRAM Memory: 512 B; Timer 8 bits: 1
footprint SOP08-5.3mm(1.27mm) (Small Outline Package 8 pin)
pins: 1 (~{RESET}/dW/ADC0/PCINT5) PB5 (io), 2 (XTAL1/CLKI/~{OC1B}/ADC3/PCINT3) PB3 (io), 3 (XTAL2/CLKO/OC1B/ADC2/PCINT4) PB4 (io), 4 GND (power), 5 (AREF/~{OC1A}/OC0A/AIN0/SDA/DI/MOSI/PCINT0) PB0 (io), 6 (OC1A/OC0B/AIN1/DO/MISO/PCINT1) PB1 (io), 7 (INT0/T0/SCL/USCK/SCK/ADC1/PCINT2) PB2 (io), 8 Vcc (power)


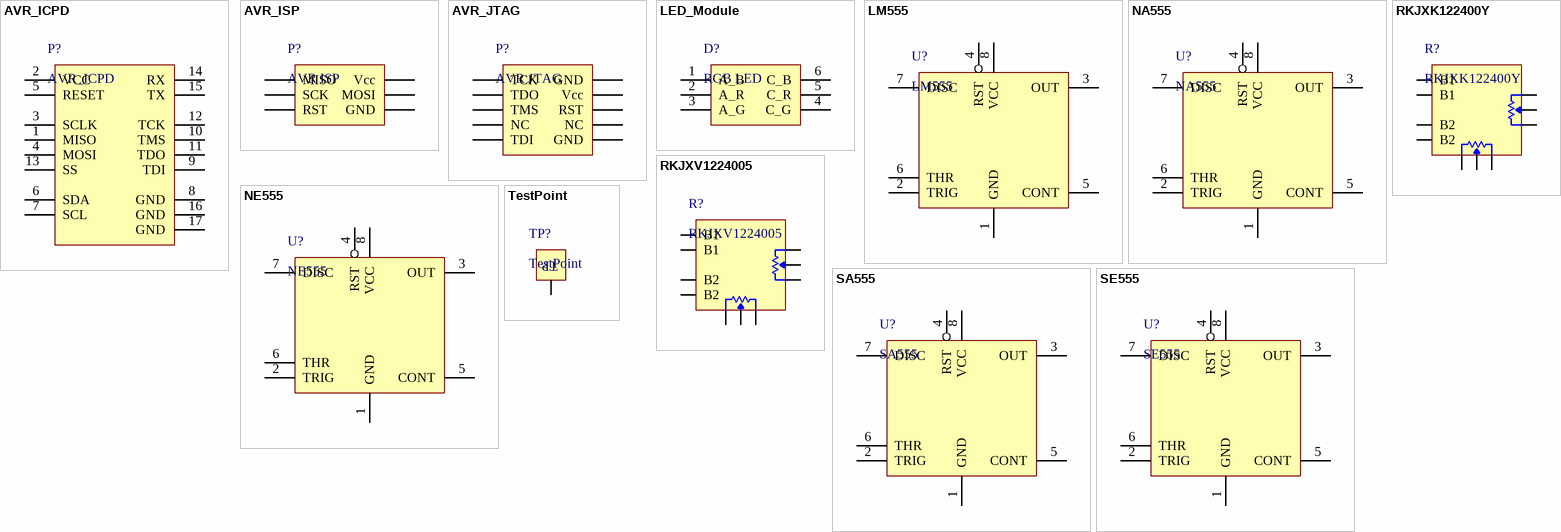
[diagram p13: symbols AVR_ICPD to TestPoint]

## AVR_ICPD
designator P?
AVR Interface for Comunication, Program and Debug
footprint HDR-M-2x8-2.54mm-180-9.2mm (Male Header, 2 lines, 8 columns, 180 degrees, 9.2 mm length)
footprint DB15F (DB15 Female Connector)
pins: 1 MISO, 2 VCC, 3 SCLK, 4 MOSI, 5 RESET, 6 SDA, 7 SCL, 8 GND, 9 TDI, 10 TMS, 11 TDO, 12 TCK, 13 SS, 14 RX, 15 TX, 16 GND, 17 GND

## AVR_ISP
designator P?, comment AVR ISP
ARV ISP Connector
footprint HDR-M-2x3-2.54mm-180-9.2mm (Male Header, 2 lines, 3 columns, 180 degrees, 9.2 mm length)
pins: 1 MISO, 2 Vcc, 3 SCK, 4 MOSI, 5 RST, 6 GND

## AVR_JTAG
designator P?, comment AVR JTAG
ARV JTAG Connector
footprint HDR-M-2x5-2.54mm-180-9.2mm (Male Header, 2 lines, 5 columns, 180 degrees, 9.2 mm length)
pins: 1 TCK, 2 GND, 3 TDO, 4 Vcc, 5 TMS, 6 RST, 7 NC, 8 NC, 9 TDI, 10 GND

## LED_Module
designator D?, comment RGB LED
RGB LED Module
footprint LED_Module (RGB LED Module)
pins: 1 A_B, 2 A_R, 3 A_G, 4 C_G, 5 C_R, 6 C_B

## LM555
designator U?
LM555 Timer
footprint DIP08-300(100) (DIP; 8 Leads; Row Spacing 7.62 mm; Pitch 2.54 mm; 3D CircuitWorks)
footprint SOIC08-150(50) (SOIC; 8 Leads; Row Spacing 3.81 mm; Pitch 1.27 mm; 3D Antonio Fagaldo)
footprint SOP08-2.9mm(0.65mm) (Small Outline Package 8 pin 2.9 mm large 0.65 mm pitch)
pins: 1 GND (power), 2 TRIG, 3 OUT, 4 RST, 5 CONT, 6 THR, 7 DISC (oc), 8 VCC (power)

## NA555
designator U?
NA555 Precision Timers
footprint DIP08-300(100) (DIP; 8 Leads; Row Spacing 7.62 mm; Pitch 2.54 mm; 3D CircuitWorks)
footprint SOIC08-150(50) (SOIC; 8 Leads; Row Spacing 3.81 mm; Pitch 1.27 mm; 3D Antonio Fagaldo)
pins: 1 GND (power), 2 TRIG, 3 OUT, 4 RST, 5 CONT, 6 THR, 7 DISC (oc), 8 VCC (power)

## NE555
designator U?
NE555 Precision Timers
footprint DIP08-300(100) (DIP; 8 Leads; Row Spacing 7.62 mm; Pitch 2.54 mm; 3D CircuitWorks)
footprint SOIC08-150(50) (SOIC; 8 Leads; Row Spacing 3.81 mm; Pitch 1.27 mm; 3D Antonio Fagaldo)
footprint SOP08-4.4mm(0.65mm) (Thin Shrink Small Outline Package 8 pin)
footprint SOP08-5.3mm(1.27mm) (Small Outline Package 8 pin)
pins: 1 GND (power), 2 TRIG, 3 OUT, 4 RST, 5 CONT, 6 THR, 7 DISC (oc), 8 VCC (power)

## RKJXK122400Y
designator R?
Multi-Directional Switches STCK CNTRLLR W/ PUSH; Manufacturer: ALPS; Body Size: 16 mm L x 16 mm W x 12.9 mm H; Center Push: Yes; Current Rating: 50 mA at 12 VDC; Directional Operating Force: 6 mN +/- 4 mN; Directional Resolution: Contiguous; Operating Angle: 60 deg; Stem Height: 12.9 mm; Control Type: Stick Controller; Potentiometer Rated Power: 0.0125 W; Supplier 1: Mouser; Manufacturer Part Number: RKJXK122400Y; RoHS: RoHS Compliant; Category: Multi-Directional Switches; Stock 1: 492; Pricing 1: 1=11.20, 25=10.29, 50=9.40, 100=8.27, 200=7.83, 500=7.62, 1000=6.68, 2000=5.87 (AUD); Packaging: Bulk; Series: RKJXV/ RKJXK; Termination Style: PCB; Brand: ALPS; Switch Contact Rating: 50 mA at 12 VDC; Product Category: Multi-Control Switches; Standard Pack Qty: 500; Tradename: ThumbPointer; RoHS - Mouser: Y; Minimum Order Quantity: 1; Reeling: False; ComponentLink1URL: http://www.alps.com/products/WebObjects/catalog.woa/E/HTML/MultiControl/Potentiometer/RKJXK/RKJXK122400Y.html; ComponentLink1Description: http://www.alps.com/products/WebObjects/catalog.woa/E/HTML/MultiControl/Potentiometer/RKJXK/RKJXK122400Y.html; Supplier Part Number 1: 688-RKJXK122400Y
footprint RKJXK1224 (Compact Size, Standard Type, Stick Controller)
pins: 1 X1, 2 X, 3 X2, 4 Y2, 5 Y, 6 Y1, 7 B2, 8 B1, 9 B1, 10 B2

## RKJXV1224005
designator R?
Multi-Directional Switches STCK CNTRLLR W/ PUSH; Manufacturer: ALPS; Body Size: 21.28 mm L x 17.79 mm W x 18.95 mm H; Center Push: Yes; Directional Operating Force: 14 mN; Stem Height: 7.75 mm; Control Type: Stick Controller; Product Status: New Product; Supplier 1: Mouser; Manufacturer Part Number: RKJXV1224005; RoHS: RoHS Compliant; Category: Multi-Directional Switches; Stock 1: 2667; Pricing 1: 1=2.78, 25=2.52, 50=2.42, 100=2.32, 500=1.80 (AUD); Packaging: Tray; Series: RKJXV/ RKJXK; Termination Style: PCB; Brand: ALPS; RoHS - Mouser: Y; Minimum Order Quantity: 1; Reeling: False; ComponentLink1URL: http://www.alps.com/products/WebObjects/catalog.woa/E/HTML/MultiControl/Potentiometer/RKJXK/RKJXV1224005.html; ComponentLink1Description: http://www.alps.com/products/WebObjects/catalog.woa/E/HTML/MultiControl/Potentiometer/RKJXK/RKJXV1224005.html; Supplier Part Number 1: 688-RKJXV1224005
footprint RKJXV1224 (Compact Size, Standard Type, Stick Controller)
pins: 1 X1, 2 X, 3 X2, 4 Y2, 5 Y, 6 Y1, 7 B2, 8 B1, 9 B1, 10 B2

## SA555
designator U?
SA555 Precision Timers
footprint DIP08-300(100) (DIP; 8 Leads; Row Spacing 7.62 mm; Pitch 2.54 mm; 3D CircuitWorks)
footprint SOIC08-150(50) (SOIC; 8 Leads; Row Spacing 3.81 mm; Pitch 1.27 mm; 3D Antonio Fagaldo)
pins: 1 GND (power), 2 TRIG, 3 OUT, 4 RST, 5 CONT, 6 THR, 7 DISC (oc), 8 VCC (power)

## SE555
designator U?
SE555 Precision Timers
footprint DIP08-300(100) (DIP; 8 Leads; Row Spacing 7.62 mm; Pitch 2.54 mm; 3D CircuitWorks)
footprint SOIC08-150(50) (SOIC; 8 Leads; Row Spacing 3.81 mm; Pitch 1.27 mm; 3D Antonio Fagaldo)
pins: 1 GND (power), 2 TRIG, 3 OUT, 4 RST, 5 CONT, 6 THR, 7 DISC (oc), 8 VCC (power)

## TestPoint
designator TP?
Test Point
footprint TEST_POINT_PTH (Test Point PTH)
footprint TEST_POINT_TOP (Test Point SMD Top)
footprint TEST_POINT_BOTTOM (Test Point SMD Bottom)
pins: 1 TP


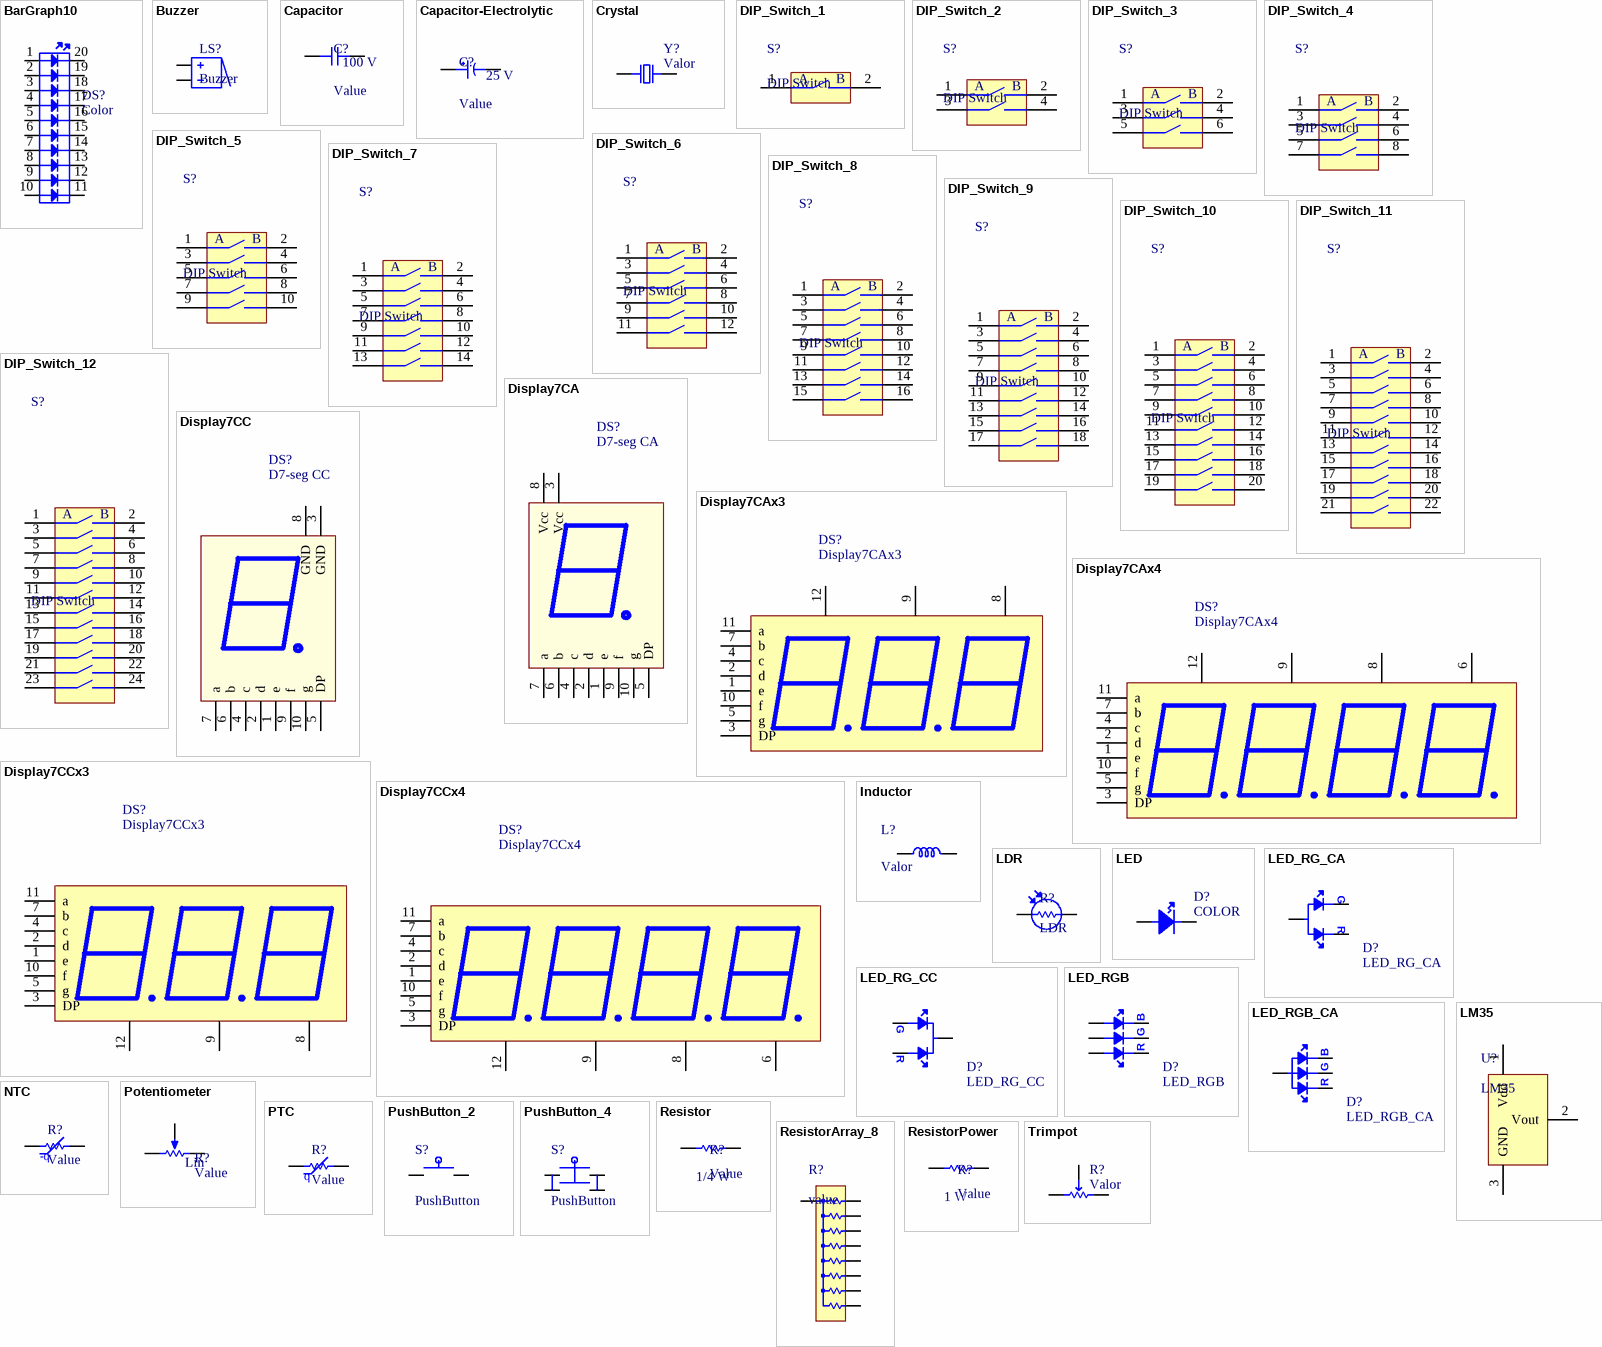
[diagram p14: symbols BarGraph10 to Trimpot]

## BarGraph10
designator DS?, comment Color
10 Segments - Bar Graph
footprint B210G (10 Segments Bar Graph - Yellow Green)
footprint B210O (10 Segments Bar Graph - Red Orange)
footprint B210SR (10 Segments Bar Graph - Ultra Bright Red)
footprint B210B-14BL (10 Segments Bar Graph - Ultra Bright Blue)
pins: 1 A1, 2 A2, 3 A3, 4 A4, 5 A5, 6 A6, 7 A7, 8 A8, 9 A9, 10 A10, 11 K10, 12 K9, 13 K8, 14 K7, 15 K6, 16 K5, 17 K4, 18 K3, 19 K2, 20 K1

## Buzzer
designator LS?
footprint Buzzer-12.0mm-6.5mm (Buzzer circular 12.0mm diameter 6.5mm pitch)
pins: 1 -, 2 +

## Capacitor
designator C?, comment Value  Voltage: 100 V
Capacitor; Published: 8-Jun-2000; LatestRevisionDate: 17-Jul-2002; LatestRevisionNote: Re-released for DXP Platform.; PackageReference: RAD-0.3; Publisher: Altium Limited
footprint C100-200-100 (Radial Cap, Thru-Hole; 2 Leads; 0.1 in Pin Spacing)
footprint C200-350-150 (Radial Cap, Thru-Hole; 2 Leads; 0.2 in Pin Spacing)
footprint C300-450-150 (Radial Cap, Thru-Hole; 2 Leads; 0.3 in Pin Spacing)
footprint C400-550-150 (Radial Cap, Thru-Hole; 2 Leads; 0.4 in Pin Spacing)
footprint 0805C (Chip Capacitor; Body 2 x 1.3 mm (LxW typ))
pins: 1, 2

## Capacitor-Electrolytic
designator C?, comment Value  Voltage: 25 V
Electrolytic Capacitor
footprint CP-RAD-4.0mm-7.0mm-1.5mm (Radial Capacitor; D 4.0mm; L 7.0mm; P 1.5mm)
footprint CP-RAD-4.0mm-11.0mm-1.5mm (Radial Capacitor; D 4.0mm; L 11.0mm; P 1.5mm)
footprint CP-RAD-5.0mm-7.0mm-2.0mm (Radial Capacitor; D 5.0mm; L 7.0mm; P 2.0mm)
footprint CP-RAD-5.0mm-11.0mm-2.0mm (Radial Capacitor; D 5.0mm; L 11.0mm; P 2.0mm)
footprint CP-RAD-5.0mm-15.0mm-2.0mm (Radial Capacitor; D 5.0mm; L 15.0mm; P 2.0mm)
footprint CP-RAD-6.3mm-7.0mm-2.5mm (Radial Capacitor; D 6.3mm; L 7.0mm; P 2.5mm)
footprint CP-RAD-6.3mm-11.2mm-2.5mm (Radial Capacitor; D 6.3mm; L 11.2mm; P 2.5mm)
footprint CP-RAD-6.3mm-15.0mm-2.5mm (Radial Capacitor; D 6.3mm; L 15.0mm; P 2.5mm)
footprint CP-RAD-8.0mm-11.5mm-3.5mm (Radial Capacitor; D 8.0mm; L 11.5mm; P 3.5mm)
footprint CP-RAD-8.0mm-15.0mm-3.5mm (Radial Capacitor; D 8.0mm; L 15.0mm; P 3.5mm)
footprint CP-RAD-8.0mm-20.0mm-3.5mm (Radial Capacitor; D 8.0mm; L 20.0mm; P 3.5mm)
footprint CP-RAD-10.0mm-12.5mm-5.0mm (Radial Capacitor; D 10.0mm; L 12.5mm; P 5.0mm)
footprint CP-RAD-10.0mm-16.0mm-5.0mm (Radial Capacitor; D 10.0mm; L 16.0mm; P 5.0mm)
footprint CP-RAD-10.0mm-20.0mm-5.0mm (Radial Capacitor; D 10.0mm; L 20.0mm; P 5.0mm)
footprint CP-RAD-10.0mm-25.0mm-5.0mm (Radial Capacitor; D 10.0mm; L 25.0mm; P 5.0mm)
footprint CP-RAD-10.0mm-30.0mm-5.0mm (Radial Capacitor; D 10.0mm; L 30.0mm; P 5.0mm)
footprint CP-RAD-12.5mm-15.0mm-5.0mm (Radial Capacitor; D 12.5mm; L 15.0mm; P 5.0mm)
footprint CP-RAD-12.5mm-20.0mm-5.0mm (Radial Capacitor; D 12.5mm; L 20.0mm; P 5.0mm)
footprint CP-RAD-12.5mm-25.0mm-5.0mm (Radial Capacitor; D 12.5mm; L 25.0mm; P 5.0mm)
footprint CP-RAD-12.5mm-30.0mm-5.0mm (Radial Capacitor; D 12.5mm; L 30.0mm; P 5.0mm)
footprint CP-RAD-12.5mm-40.0mm-5.0mm (Radial Capacitor; D 12.5mm; L 40.0mm; P 5.0mm)
footprint CP-RAD-16.0mm-15.0mm-7.5mm (Radial Capacitor; D 16.0mm; L 15.0mm; P 7.5mm)
footprint CP-RAD-16.0mm-20.0mm-7.5mm (Radial Capacitor; D 16.0mm; L 20.0mm; P 7.5mm)
footprint CP-RAD-16.0mm-25.0mm-7.5mm (Radial Capacitor; D 16.0mm; L 25.0mm; P 7.5mm)
footprint CP-RAD-16.0mm-31.5mm-7.5mm (Radial Capacitor; D 16.0mm; L 31.5mm; P 7.5mm)
footprint CP-RAD-16.0mm-35.5mm-7.5mm (Radial Capacitor; D 16.0mm; L 35.5mm; P 7.5mm)
footprint CP-RAD-16.0mm-40.0mm-7.5mm (Radial Capacitor; D 16.0mm; L 40.0mm; P 7.5mm)
footprint CP-RAD-18.0mm-15.0mm-7.5mm (Radial Capacitor; D 18.0mm; L 15.0mm; P 7.5mm)
footprint CP-RAD-18.0mm-20.0mm-7.5mm (Radial Capacitor; D 18.0mm; L 20.0mm; P 7.5mm)
footprint CP-RAD-18.0mm-25.0mm-7.5mm (Radial Capacitor; D 18.0mm; L 25.0mm; P 7.5mm)
footprint CP-RAD-18.0mm-31.5mm-7.5mm (Radial Capacitor; D 18.0mm; L 31.5mm; P 7.5mm)
footprint CP-RAD-18.0mm-35.5mm-7.5mm (Radial Capacitor; D 18.0mm; L 35.5mm; P 7.5mm)
footprint CP-RAD-18.0mm-40.0mm-7.5mm (Radial Capacitor; D 18.0mm; L 40.0mm; P 7.5mm)
footprint CP-RAD-12.5mm-35.0mm-5.0mm (Radial Capacitor; D 12.5mm; L 35.0mm; P 5.0mm)
footprint CP-SMD(B)-4.3mm-4.3mm-5.4mm (Electrolytic Capacitor SMD Radial Can; C Type; W 4.3mm; L 4.3mm; H 5.4mm)
footprint CP-SMD(C)-5.3mm-5.3mm-5.8mm (Electrolytic Capacitor SMD Radial Can; C Type; W 5.3mm; L 5.3mm; H 5.8mm)
footprint CP-SMD(D)-6.6mm-6.6mm-5.8mm (Electrolytic Capacitor SMD Radial Can; D Type; W 6.6mm; L 6.6mm; H 5.8mm)
footprint CP-SMD(D8)-6.6mm-6.6mm-7.7mm (Electrolytic Capacitor SMD Radial Can; D8 Type; W 6.6mm; L 6.6mm; H 7.7mm)
footprint CP-SMD(E)-8.3mm-8.3mm-6.2mm (Electrolytic Capacitor SMD Radial Can; F Type; W 8.3mm; L 8.3mm; H 6.2mm)
footprint CP-SMD(F)-8.3mm-8.3mm-10.2mm (Electrolytic Capacitor SMD Radial Can; F Type; W 8.3mm; L 8.3mm; H 10.2mm)
footprint CP-SMD(G)-10.3mm-10.3mm-10.2mm (Electrolytic Capacitor SMD Radial Can; G Type; W 10.3mm; L 10.3mm; H 10.2mm)
footprint CP-SMD(G13)-10.3mm-10.3mm-13.5mm (Electrolytic Capacitor SMD Radial Can; G13 Type; W 10.3mm; L 10.3mm; H 13.5mm)
footprint CP-SMD(G17)-10.3mm-10.3mm-16.5mm (Electrolytic Capacitor SMD Radial Can; G17 Type; W 10.3mm; L 10.3mm; H 16.5mm)
footprint CP-SMD(H13)-13.5mm-13.5mm-13.5mm (Electrolytic Capacitor SMD Radial Can; H13 Type; W 13.5mm; L 13.5mm; H 13.5mm)
footprint CP-SMD(H16)-13.5mm-13.5mm-16.5mm (Electrolytic Capacitor SMD Radial Can; H16 Type; W 13.5mm; L 13.5mm; H 16.5mm)
footprint CP-SMD(J16)-17.0mm-17.0mm-16.5mm (Electrolytic Capacitor SMD Radial Can; J16 Type; W 17.0mm; L 17.0mm; H 16.5mm)
footprint CP-SMD(J21)-17.0mm-17.0mm-21.5mm (Electrolytic Capacitor SMD Radial Can; J21 Type; W 17.0mm; L 17.0mm; H 21.5mm)
footprint CP-SMD(K16)-19.0mm-19.0mm-16.5mm (Electrolytic Capacitor SMD Radial Can; K16 Type; W 19.0mm; L 19.0mm; H 16.5mm)
footprint CP-SMD(K21)-19.0mm-19.0mm-21.5mm (Electrolytic Capacitor SMD Radial Can; K21 Type; W 19.0mm; L 19.0mm; H 21.5mm)
pins: 1, 2
1 alternate drawing of the same symbol

## Crystal
designator Y?, comment Valor
Crystal
footprint Crystal-3.0mm-8.0mm (THT Quartz Crystal Metal Can 3mm diameter 8mm large)
footprint Crystal-3.0mm-8.0mm-H (THT Quartz Crystal Metal Can 3mm diameter 8mm large Horizontal Mount)
footprint HC49-US-SMD (SMD Quartz Crystal)
footprint HC49-US-THT (THT Quartz Crystal)
pins: 1, 2

## DIP_Switch_1
designator S?, comment DIP Switch
DIP SWITCH 1 switch
footprint DS01-300(100)-180 (Dip-Switch 1 element 180 degress)
pins: 1 1A, 2 1B
text: A; B

## DIP_Switch_2
designator S?, comment DIP Switch
DIP SWITCH 2 switches
footprint DS02-300(100)-180 (Dip-Switch 2 elements 180 degress)
pins: 1 1A, 2 1B, 3 2A, 4 2B
text: A; B

## DIP_Switch_3
designator S?, comment DIP Switch
DIP SWITCH 3 switches
footprint DS03-300(100)-180 (Dip-Switch 3 elements 180 degress)
pins: 1 1A, 2 1B, 3 2A, 4 2B, 5 3A, 6 3B
text: A; B

## DIP_Switch_4
designator S?, comment DIP Switch
DIP SWITCH 4 switches
footprint DS04-300(100)-180 (Dip-Switch 4 elements 180 degress)
pins: 1 1A, 2 1B, 3 2A, 4 2B, 5 3A, 6 3B, 7 4A, 8 4B
text: A; B

## DIP_Switch_5
designator S?, comment DIP Switch
DIP SWITCH 5 switches
footprint DS05-300(100)-180 (Dip-Switch 5 elements 180 degress)
pins: 1 1A, 2 1B, 3 2A, 4 2B, 5 3A, 6 3B, 7 4A, 8 4B, 9 5A, 10 5B
text: A; B

## DIP_Switch_6
designator S?, comment DIP Switch
DIP SWITCH 6 switches
footprint DS06-300(100)-180 (Dip-Switch 6 elements 180 degress)
pins: 1 1A, 2 1B, 3 2A, 4 2B, 5 3A, 6 3B, 7 4A, 8 4B, 9 5A, 10 5B, 11 6A, 12 6B
text: A; B

## DIP_Switch_7
designator S?, comment DIP Switch
DIP SWITCH 7 switches
footprint DS07-300(100)-180 (Dip-Switch 7 elements 180 degress)
pins: 1 1A, 2 1B, 3 2A, 4 2B, 5 3A, 6 3B, 7 4A, 8 4B, 9 5A, 10 5B, 11 6A, 12 6B, 13 7A, 14 7B
text: A; B

## DIP_Switch_8
designator S?, comment DIP Switch
DIP SWITCH 8 switches
footprint DS08-300(100)-180 (Dip-Switch 8 elements 180 degress)
pins: 1 1A, 2 1B, 3 2A, 4 2B, 5 3A, 6 3B, 7 4A, 8 4B, 9 5A, 10 5B, 11 6A, 12 6B, 13 7A, 14 7B, 15 8A, 16 8B
text: A; B

## DIP_Switch_9
designator S?, comment DIP Switch
DIP SWITCH 9 switches
footprint DS09-300(100)-180 (Dip-Switch 9 elements 180 degress)
pins: 1 1A, 2 1B, 3 2A, 4 2B, 5 3A, 6 3B, 7 4A, 8 4B, 9 5A, 10 5B, 11 6A, 12 6B, 13 7A, 14 7B, 15 8A, 16 8B, 17 9A, 18 9B
text: A; B

## DIP_Switch_10
designator S?, comment DIP Switch
DIP SWITCH 10 switches
footprint DS10-300(100)-180 (Dip-Switch 10 elements 180 degress)
pins: 1 1A, 2 1B, 3 2A, 4 2B, 5 3A, 6 3B, 7 4A, 8 4B, 9 5A, 10 5B, 11 6A, 12 6B, 13 7A, 14 7B, 15 8A, 16 8B, 17 9A, 18 9B, 19 10A, 20 10B
text: A; B

## DIP_Switch_11
designator S?, comment DIP Switch
DIP SWITCH 11 switches
footprint DS11-300(100)-180 (Dip-Switch 11 elements 180 degress)
pins: 1 1A, 2 1B, 3 2A, 4 2B, 5 3A, 6 3B, 7 4A, 8 4B, 9 5A, 10 5B, 11 6A, 12 6B, 13 7A, 14 7B, 15 8A, 16 8B, 17 9A, 18 9B, 19 10A, 20 10B, 21 11A, 22 11B
text: A; B

## DIP_Switch_12
designator S?, comment DIP Switch
DIP SWITCH 12 switches
footprint DS12-300(100)-180 (Dip-Switch 12 elements 180 degress)
pins: 1 1A, 2 1B, 3 2A, 4 2B, 5 3A, 6 3B, 7 4A, 8 4B, 9 5A, 10 5B, 11 6A, 12 6B, 13 7A, 14 7B, 15 8A, 16 8B, 17 9A, 18 9B, 19 10A, 20 10B, 21 11A, 22 11B, 23 12A, 24 12B
text: A; B

## Display7CA
designator DS?, comment D7-seg CA
Seven Segments Display Common Anode
footprint D7S-13mm (Display 7 Segmentos 13 mm)
footprint D7S-10mm (Display 7 Segmentos 10 mm); pin to pad 1>4 2>5 4>7 5>6 6>9 7>10 9>2 10>1
footprint D7S-07mm (Display 7 Segmentos 7 mm); pin to pad 9>10 10>9
footprint D7S-25mm (Display 7 Segmentos 25 mm)
pins: 1 e, 2 d, 3 Vcc, 4 c, 5 DP, 6 b, 7 a, 8 Vcc, 9 f, 10 g

## Display7CAx3
designator DS?
3 Digits Seven Segments Display Common Anode
footprint D3042ASR (Triple 0.4" Display Common Anode - Ultra Bright Red)
footprint D3042AO (Triple 0.4" Display Common Anode - Red Orange)
footprint D3042AG (Triple 0.4" Display Common Anode - Yellow Green)
pins: 1 e, 2 d, 3 DP, 4 c, 5 g, 7 b, 8 D1, 9 D2, 10 f, 11 a, 12 D3

## Display7CAx4
designator DS?
4 Digits Seven Segments Display Common Anode
footprint D4156AB-14BL (Quadruple 0.56" Display Common Anode - Ultra Bright Blue)
footprint D4156AG (Quadruple 0.56" Display Common Anode - Yellow Green)
footprint D4156AO (Quadruple 0.56" Display Common Anode - Red Orange)
footprint D4156ASR (Quadruple 0.56" Display Common Anode - Ultra Bright Red)
pins: 1 e, 2 d, 3 DP, 4 c, 5 g, 6 D0, 7 b, 8 D1, 9 D2, 10 f, 11 a, 12 D3

## Display7CC
designator DS?, comment D7-seg CC
Seven Segments Display Common Cathode
footprint D7S-13mm (Display 7 Segmentos 13 mm)
footprint D7S-10mm (Display 7 Segmentos 10 mm); pin to pad 1>4 2>5 4>7 5>6 6>9 7>10 9>2 10>1
footprint D7S-07mm (Display 7 Segmentos 7 mm); pin to pad 9>10 10>9
footprint D7S-25mm (Display 7 Segmentos 25 mm)
pins: 1 e, 2 d, 3 GND, 4 c, 5 DP, 6 b, 7 a, 8 GND, 9 f, 10 g

## Display7CCx3
designator DS?
3 Digits Seven Segments Display Common Cathode
footprint D3042KSR (Triple 0.4" Display Common Cathode - Ultra Bright Red)
footprint D3042KO (Triple 0.4" Display Common Cathode - Red Orange)
footprint D3042KG (Triple 0.4" Display Common Cathode - Yellow Green)
pins: 1 e, 2 d, 3 DP, 4 c, 5 g, 7 b, 8 D1, 9 D2, 10 f, 11 a, 12 D3

## Display7CCx4
designator DS?
4 Digits Seven Segments Display Common Cathode
footprint D4156KB-14BL (Footprint not found)
footprint D4156KG (Footprint not found)
footprint D4156KO (Footprint not found)
footprint D4156KSR (Footprint not found)
pins: 1 e, 2 d, 3 DP, 4 c, 5 g, 6 D0, 7 b, 8 D1, 9 D2, 10 f, 11 a, 12 D3

## Inductor
designator L?, comment Valor
Inductor
footprint L400-2.0mm (Axial Device, Thru-Hole; 2 Leads; 0.4 in Pin Spacing)
footprint 0805I (Chip Inductor; Body 2 x 1.3 mm (LxW typ))
pins: 1, 2

## LDR
designator R?
Ligh Dependant Resistor
footprint LDR-5mm (Light Dependant Resistor 5 mm)
pins: 1, 2

## LED
designator D?, comment COLOR
Light Emitting Diode
pins: A, K

## LED_RG_CA
designator D?
Led Bicolor Red-Green Common Anode
pins: A, G, R

## LED_RG_CC
designator D?
Led Bicolor Red-Green Common Cathode
pins: G, K, R

## LED_RGB
designator D?
Led Tricolor Red-Green-Blue
footprint 5050-LED-RGB
pins: BA, BC, GA, GC, RA, RC
text: B; G; R

## LED_RGB_CA
designator D?
Led Tricolor Red-Green-Blue Common Anode
pins: A, B, G, R

## LM35
designator U?
Precise Centigrade Temperature Sensor; Supply Voltage (Vdd): 4 - 30 V
footprint TO-92/123 (Transistor Outline Package, Case Style 92 123; 3D Sergey Atanov)
footprint TO-46/123 (Transistor Outline Package, Case Style 46 123; 3D)
footprint SOIC08-150(50) (SOIC 8 Leads; Row Spacing 3.81 mm; Pitch 1.27 mm; 3D André L´Hérault); pin to pad 1>8 2>1 3>4
footprint TO-220/123 (TO, Thru-Hole, Vertical, Heatsink Mounted; 3 In-Line Leads; Pitch 2.54 mm); pin to pad 2>3 3>2
pins: 1 Vdd, 2 Vout, 3 GND

## NTC
designator R?, comment Value
Negative Temperature Coefficient Thermistor
footprint Thermistor-100mil (Thermistor 100 mil)
pins: 1, 2
text: -q

## Potentiometer
designator R?, comment Value  Type: Lin
Potentiometer
footprint HDR-M-1x3-2.54mm-180-9.2mm (Male Header, 1 line 3 rows, 180 degrees, 9.2 mm length)
footprint POT (Connector; Header; 3 Position)
pins: 1 TOP, 2 TAP, 3 BOT
1 alternate drawing of the same symbol

## PTC
designator R?, comment Value
Positive Temperature Coefficient Thermistor
footprint Thermistor-100mil (Thermistor 100 mil)
pins: 1, 2
text: q

## PushButton_2
designator S?, comment PushButton
Tactile Switch SPST 2 pins
footprint DTS-6.0mm-3.5mm-SMD (Push Button Switch Surface Mount 6.0mm x 3.5mm)
footprint DTS-6.0mm-3.5mm-THT (Push Button Switch Through Role 6.0mm x 3.5mm)
pins: 1, 2

## PushButton_4
designator S?, comment PushButton
Tactile Switch SPST 4 pins
footprint DTS-6.0mm-6.0mm-SMD (Push Button Switch Surface Mount 6.0mm x 6.0mm)
footprint DTS-6.0mm-6.0mm-THT (Push Button Switch Through Role 6.0mm x 6.0mm)
footprint DTS-12.0mm-12.0mm-SMD (Push Button Switch Surface Mount 12.0mm x 12.0mm)
footprint DTS-12.0mm-12.0mm-THT (Push Button Switch Through Role 12.0mm x 12.0mm)
pins: 1, 2, 3, 4

## Resistor
designator R?, comment Value  Power: 1/4 W
Resistor; Tolerance: 5%; Published: 8-Jun-2000; LatestRevisionDate: 17-Jul-2002; LatestRevisionNote: Re-released for DXP Platform.; PackageReference: AXIAL-0.3; Publisher: Altium Limited
footprint 0805R (Chip Resistor; Body 2 x 1.3 mm (LxW typ))
footprint R300-1.5mm (Axial Device, Thru-Hole; 2 Leads; 0.3 in Pin Spacing)
footprint R400-2.0mm (Axial Device, Thru-Hole; 2 Leads; 0.4 in Pin Spacing)
footprint R500-2.5mm (Axial Device, Thru-Hole; 2 Leads; 0.5 in Pin Spacing)
footprint R600-2.5mm (Axial Device, Thru-Hole; 2 Leads; 0.6 in Pin Spacing)
footprint R700-4.0mm (Axial Device, Thru-Hole; 2 Leads; 0.7 in Pin Spacing)
footprint R800-4.0mm (Axial Device, Thru-Hole; 2 Leads; 0.8 in Pin Spacing)
footprint R900-5.0mm (Axial Device, Thru-Hole; 2 Leads; 0.9 in Pin Spacing)
footprint R1000-7.6mm (Axial Device, Thru-Hole; 2 Leads; 1.0 in Pin Spacing)
pins: 1, 2
1 alternate drawing of the same symbol

## ResistorArray_8
designator R?, comment value
Resistor Array
footprint Resistor_Array_8 (Resistor Array 8 Elements, 9 pins; 3D Luis Maduro)
pins: 1, 2, 3, 4, 5, 6, 7, 8, 9

## ResistorPower
designator R?, comment Value  Power: 1 W
Power Resistor; Tolerance: 5%; Published: 8-Jun-2000; LatestRevisionDate: 17-Jul-2002; LatestRevisionNote: Re-released for DXP Platform.; PackageReference: AXIAL-0.3; Publisher: Altium Limited
footprint R-AC01 (Cemented Wirewound Resistor 1 W)
footprint R-AC03 (Cemented Wirewound Resistor 3 W)
footprint R-AC04 (Cemented Wirewound Resistor 4 W)
footprint R-AC05 (Cemented Wirewound Resistor 5 W)
footprint R-AC07 (Cemented Wirewound Resistor 7 W)
footprint R-AC10 (Cemented Wirewound Resistor 10 W)
pins: 1, 2
1 alternate drawing of the same symbol

## Trimpot
designator R?, comment Valor
Trimpot
footprint Trimpot-3006P (Trimpot 3006P)
footprint Trimpot-3006W (Trimpot 3006W)
footprint Trimpot-3006Y (Trimpot 3006Y)
footprint Trimpot-3009P (Trimpot 3009P)
footprint Trimpot-3009Y (Trimpot 3009Y)
footprint Trimpot-3260H (Trimpot 3260H)
footprint Trimpot-3260W (Trimpot 3260W)
footprint Trimpot-3262P (Trimpot 3262P)
footprint Trimpot-3262W (Trimpot 3262W)
footprint Trimpot-3262X (Trimpot 3262X)
footprint Trimpot-3266P (Trimpot 3266P)
footprint Trimpot-3266W (Trimpot 3266W)
footprint Trimpot-3266X (Trimpot 3266X)
footprint Trimpot-3266Y (Trimpot 3266Y)
footprint Trimpot-3266Z (Trimpot 3266Z)
footprint Trimpot-3290H (Trimpot 3290H)
footprint Trimpot-3290P (Trimpot 3290P)
footprint Trimpot-3290W (Trimpot 3290W)
footprint Trimpot-3296P (Trimpot 3296P)
footprint Trimpot-3296W (Trimpot 3296W)
footprint Trimpot-3296X (Trimpot 3296X)
footprint Trimpot-3296Y (Trimpot 3296Y)
footprint Trimpot-3296Z (Trimpot 3296Z)
footprint Trimpot-3299W (Trimpot 3299W)
footprint Trimpot-3299X (Trimpot 3299X)
footprint Trimpot-3299Y (Trimpot 3299Y)
footprint Trimpot-3299Z (Trimpot 3299Z)
pins: 1, 2, 3


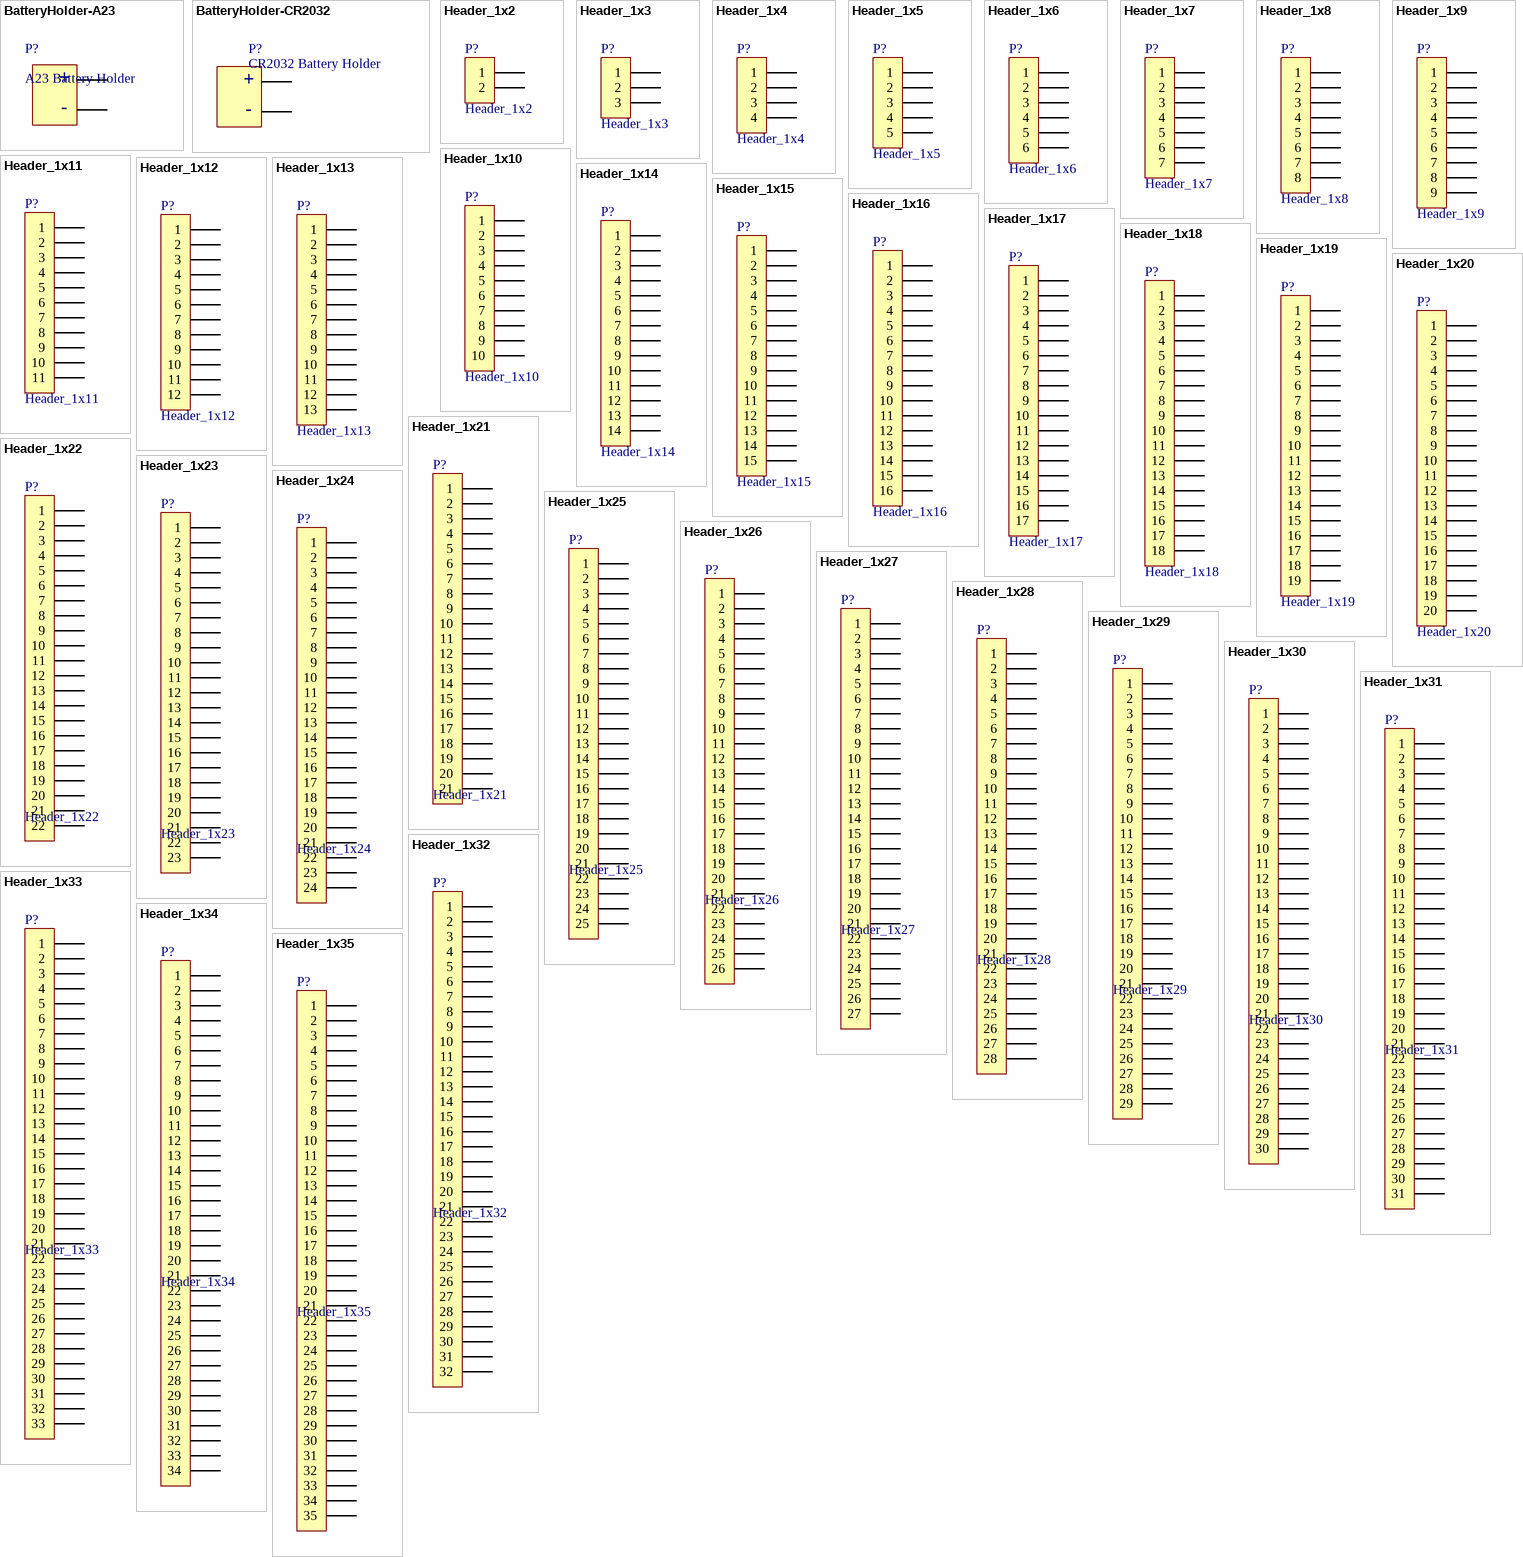
[diagram p15: symbols BatteryHolder-A23 to Header_1x35]

## BatteryHolder-A23
designator P?, comment A23 Battery Holder
footprint BH-A23-1 (A23 Battery Holder)
pins: 1 -, 2 +

## BatteryHolder-CR2032
designator P?, comment CR2032 Battery Holder
footprint BH-CR2032-1 (CR2032 Battery Holder with Easy Release Clip)
footprint BH-CR2032-2 (CR2032 Battery Holder with Easy Release Clip)
pins: 1 -, 2 +

## Header_1x2
designator P?
Header, 1 Line, 2 Columns, 2 Pins; LatestRevisionDate: 17-Jul-2002; LatestRevisionNote: Re-released for DXP Platform.; Publisher: Altium Limited
footprint HDR-M-1x2-2.54mm-180-9.2mm (Male Header, 1 line 2 rows, 180 degrees, 9.2 mm length)
footprint HDR-M-1x2-2.54mm-180-11.2mm (Male Header, 1 line 2 rows, 180 degrees, 11.2 mm length)
footprint HDR-M-1x2-2.54mm-180-11.6mm (Male Header, 1 line 2 rows, 180 degrees, 11.6 mm length)
footprint HDR-M-1x2-2.54mm-180-12.4mm (Male Header, 1 line 2 rows, 180 degrees, 12.4 mm length)
footprint HDR-M-1x2-2.54mm-180-13.6mm (Male Header, 1 line 2 rows, 180 degrees, 13.6 mm length)
footprint HDR-M-1x2-2.54mm-180-21.1mm (Male Header, 1 line 2 rows, 180 degrees, 21.1 mm length)
footprint HDR-F-1x2-2.54mm-180-8.7mm (Female Header, 1 line 2 rows, 180 degrees, 8.7 mm length)
pins: 1, 2